# Altium schematic symbol library SamacSys.SchLib: 1235 symbols (part 9 of 13)
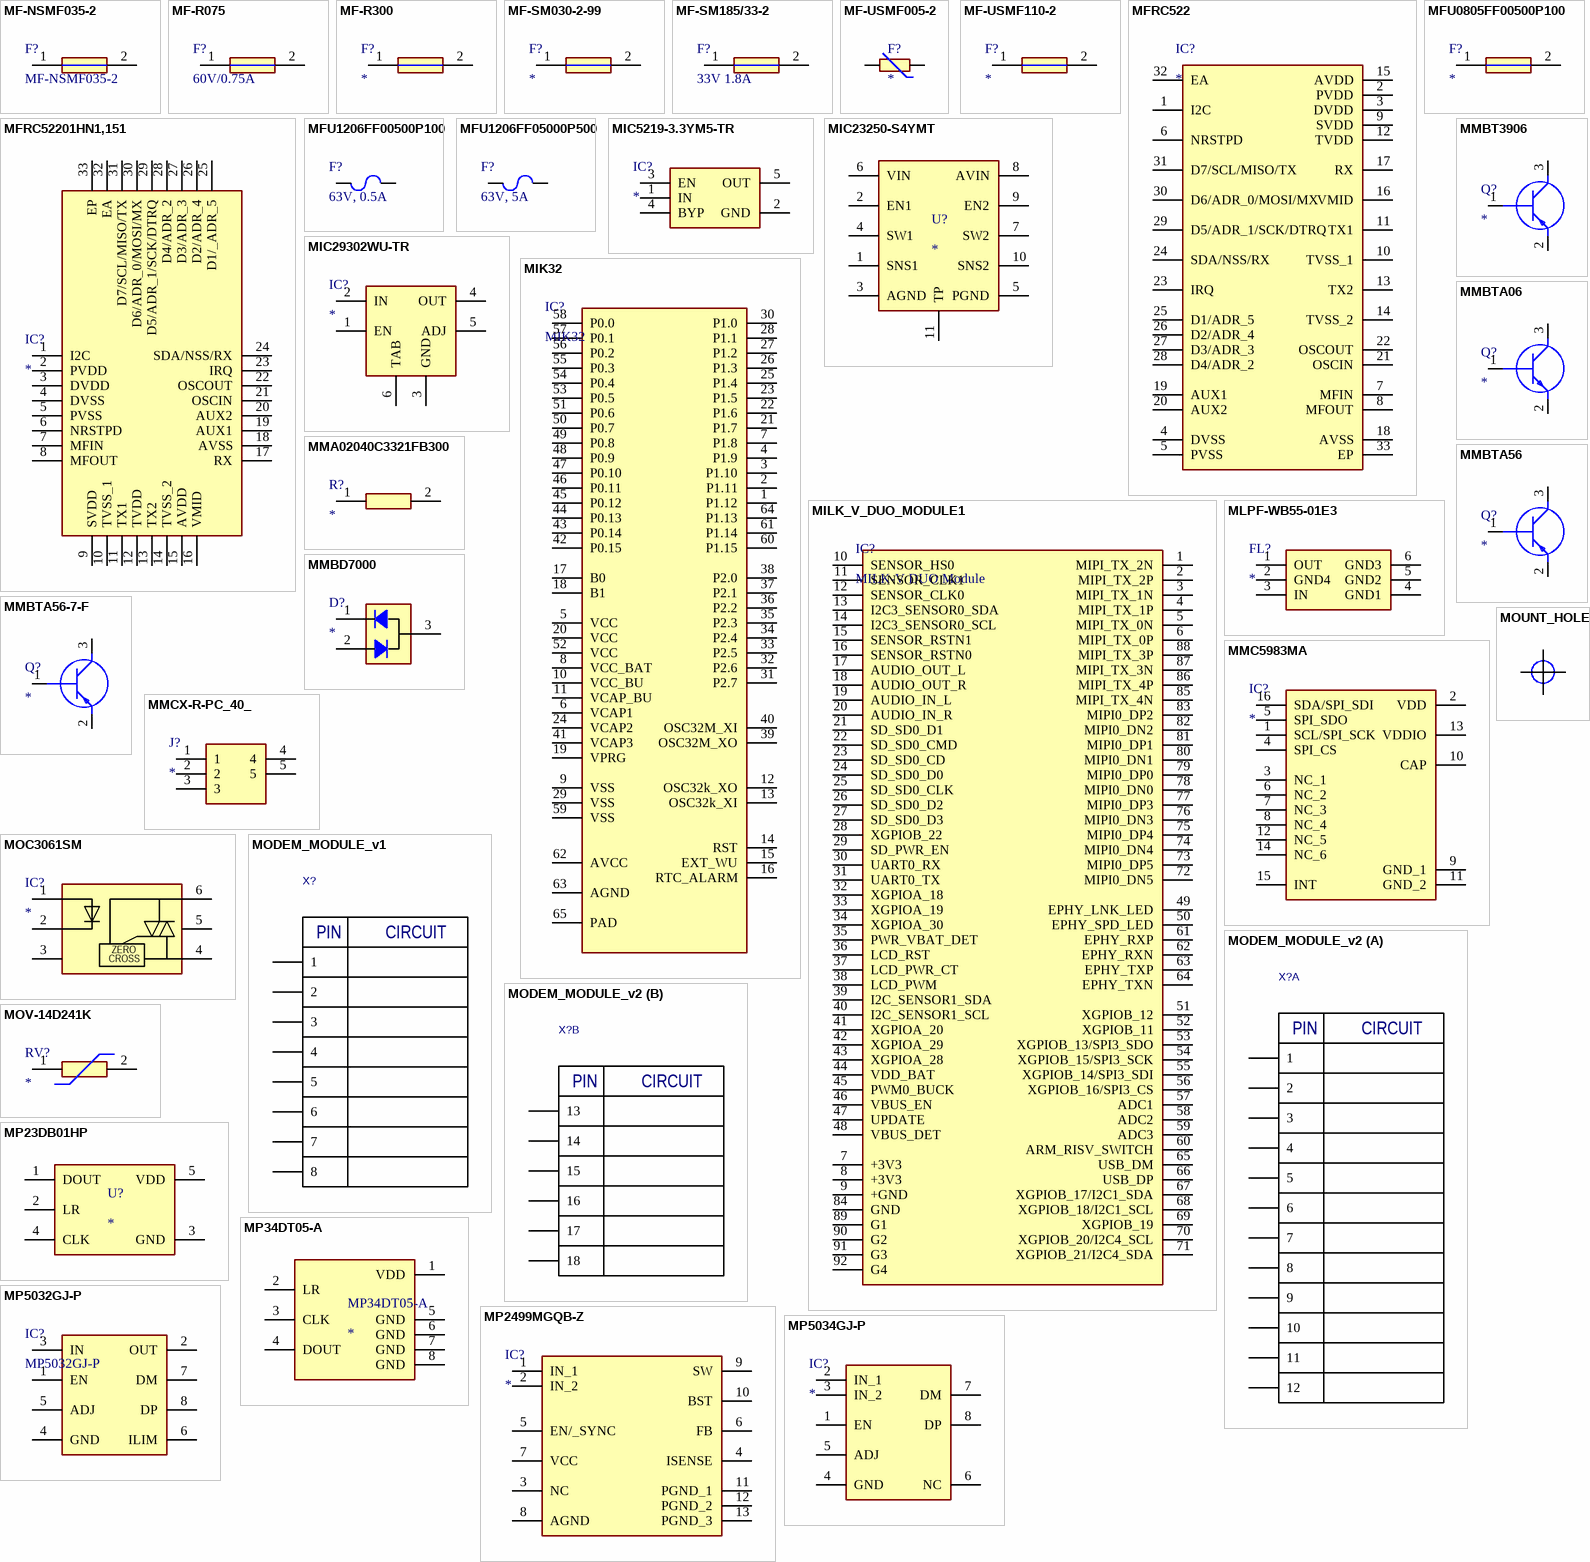
[diagram p53: symbols MF-NSMF035-2 to MP5034GJ-P]

## MILK_V_DUO_MODULE1
designator IC?, comment MILK-V DUO Module
SOM MILK-V DUO Module; Manufacturer_Name: AMUR; Manufacturer_Part_Number: MIK32; Datasheet Link: https://nc.mikron.ru/s/aXSRc8HdLAM2LLg/download; Height: 1.6mm
footprint MILK-V
pins: 1 MIPI_TX_2N, 2 MIPI_TX_2P, 3 MIPI_TX_1N, 4 MIPI_TX_1P, 5 MIPI_TX_0N, 6 MIPI_TX_0P, 7 +3V3, 8 +3V3, 9 +GND, 10 SENSOR_HS0, 11 SENSOR_CLK1, 12 SENSOR_CLK0, 13 I2C3_SENSOR0_SDA, 14 I2C3_SENSOR0_SCL, 15 SENSOR_RSTN1, 16 SENSOR_RSTN0, 17 AUDIO_OUT_L, 18 AUDIO_OUT_R, 19 AUDIO_IN_L, 20 AUDIO_IN_R, 21 SD_SD0_D1, 22 SD_SD0_CMD, 23 SD_SD0_CD, 24 SD_SD0_D0, 25 SD_SD0_CLK, 26 SD_SD0_D2, 27 SD_SD0_D3, 28 XGPIOB_22, 29 SD_PWR_EN, 30 UART0_RX, 31 UART0_TX, 32 XGPIOA_18, 33 XGPIOA_19, 34 XGPIOA_30, 35 PWR_VBAT_DET, 36 LCD_RST, 37 LCD_PWR_CT, 38 LCD_PWM, 39 I2C_SENSOR1_SDA, 40 I2C_SENSOR1_SCL, 41 XGPIOA_20, 42 XGPIOA_29, 43 XGPIOA_28, 44 VDD_BAT, 45 PWM0_BUCK, 46 VBUS_EN, 47 UPDATE, 48 VBUS_DET, 49 EPHY_LNK_LED, 50 EPHY_SPD_LED, 51 XGPIOB_12, 52 XGPIOB_11, 53 XGPIOB_13/SPI3_SDO, 54 XGPIOB_15/SPI3_SCK, 55 XGPIOB_14/SPI3_SDI, 56 XGPIOB_16/SPI3_CS, 57 ADC1, 58 ADC2, 59 ADC3, 60 ARM_RISV_SWITCH, 61 EPHY_RXP, 62 EPHY_RXN, 63 EPHY_TXP, 64 EPHY_TXN, 65 USB_DM, 66 USB_DP, 67 XGPIOB_17/I2C1_SDA, 68 XGPIOB_18/I2C1_SCL, 69 XGPIOB_19, 70 XGPIOB_20/I2C4_SCL, 71 XGPIOB_21/I2C4_SDA, 72 MIPI0_DN5, 73 MIPI0_DP5, 74 MIPI0_DN4, 75 MIPI0_DP4, 76 MIPI0_DN3, 77 MIPI0_DP3, 78 MIPI0_DN0, 79 MIPI0_DP0, 80 MIPI0_DN1, 81 MIPI0_DP1, 82 MIPI0_DN2, 83 MIPI0_DP2, 84 GND, 85 MIPI_TX_4N, 86 MIPI_TX_4P, 87 MIPI_TX_3N, 88 MIPI_TX_3P, 89 G1, 90 G2, 91 G3, 92 G4

## MLPF-WB55-01E3
designator FL?
Filter; Manufacturer_Name: STMicroelectronics; Manufacturer_Part_Number: MLPF-WB55-01E3; Datasheet Link: https://www.st.com/resource/en/datasheet/mlpf-wb55-01e3.pdf; Height: 0.7mm; Mouser Part Number: 511-MLPF-WB55-01E3; Mouser Price/Stock: https://www.mouser.co.uk/ProductDetail/STMicroelectronics/MLPF-WB55-01E3?qs=vLWxofP3U2xV%2FkxL9PmCDA%3D%3D; Arrow Part Number: MLPF-WB55-01E3; Arrow Price/Stock: https://www.arrow.com/en/products/mlpf-wb55-01e3/stmicroelectronics?region=nac
footprint MLPFWB5501E3
pins: 1 OUT, 2 GND4, 3 IN, 4 GND1, 5 GND2, 6 GND3

## MMA02040C3321FB300
designator R?
Resistor; Manufacturer_Name: Vishay; Manufacturer_Part_Number: MMA02040C3321FB300; Datasheet Link: https://datasheet.datasheetarchive.com/originals/distributors/DKDS-23/453161.pdf; Mouser Part Number: 594-MMA02040C3321FB3; Mouser Price/Stock: https://www.mouser.co.uk/ProductDetail/Vishay-Beyschlag/MMA02040C3321FB300?qs=YmMt7wOBEV7gsVIrtGr5Rw%3D%3D; Arrow Part Number: MMA02040C3321FB300; Arrow Price/Stock: https://www.arrow.com/en/products/mma02040c3321fb300/vishay
footprint MMA0204_1
pins: 1, 2

## MMBD7000
designator D?
Diode; Manufacturer_Name: onsemi; Manufacturer_Part_Number: MMBD7000; Datasheet Link: https://www.onsemi.com/download/data-sheet/pdf/MMBD7000-D.pdf; Height: 1.2mm; Mouser Part Number: 512-MMBD7000; Mouser Price/Stock: https://www.mouser.co.uk/ProductDetail/onsemi-Fairchild/MMBD7000?qs=E58pcOqB2RJvzzSZ6FVA5Q%3D%3D; Arrow Part Number: MMBD7000; Arrow Price/Stock: https://www.arrow.com/en/products/mmbd7000/on-semiconductor?region=europe
footprint SOT95P240X120-3N
pins: 1 A, 2 K, 3 K/A

## MMBT3906
designator Q?
Transistor BJT PNP; Manufacturer_Name: NXP; Manufacturer_Part_Number: MMBT3906; Datasheet Link: https://datasheet.pas.partquest.com/images/VipMasterIC/IC/PIRS/PIRSS12749/PIRSS12749-1.pdf?hkey=61A2E4C270F0397D049F8F05BD4F1054; Height: 1.1mm; Mouser Part Number: N/A; Mouser Price/Stock: https://www.mouser.co.uk/ProductDetail/NXP-Semiconductors/MMBT3906?qs=55YtniHzbhA96dkd8h4s7Q%3D%3D
footprint SOT95P230X110-3N
pins: 1 B, 2 E, 3 C

## MMBTA06
designator Q?
Transistor BJT NPN; Manufacturer_Name: onsemi; Manufacturer_Part_Number: MMBTA06; Datasheet Link: http://www.onsemi.com/pub/Collateral/PZTA06-D.pdf; Height: 1.2mm; Mouser Part Number: 512-MMBTA06; Mouser Price/Stock: https://www.mouser.co.uk/ProductDetail/onsemi-Fairchild/MMBTA06?qs=UMEuL5FsraDNITJVR5yrvg%3D%3D; Arrow Part Number: MMBTA06; Arrow Price/Stock: https://www.arrow.com/en/products/mmbta06/on-semiconductor
footprint SOT95P240X120-3N
pins: 1 B, 2 E, 3 C

## MMBTA56
designator Q?
Transistor BJT PNP; Manufacturer_Name: PANJIT International Inc; Manufacturer_Part_Number: MMBTA56; Datasheet Link: https://www.panjit.com.tw/en/Product/downloadPDF/MMBTA56; Height: 1.1mm
footprint SOT95P240X110-3N
pins: 1 B, 2 E, 3 C

## MMBTA56-7-F
designator Q?
Transistor BJT PNP; Manufacturer_Name: Diodes Incorporated; Manufacturer_Part_Number: MMBTA56-7-F; Datasheet Link: https://www.diodes.com/assets/Datasheets/MMBTA55_MMBTA56.pdf; Height: 1.1mm; Mouser Part Number: 621-MMBTA56-F; Mouser Price/Stock: https://www.mouser.co.uk/ProductDetail/Diodes-Incorporated/MMBTA56-7-F?qs=%252BirgkK6WbZHZ3vYMnw8jtQ%3D%3D; Arrow Part Number: MMBTA56-7-F; Arrow Price/Stock: https://www.arrow.com/en/products/mmbta56-7-f/diodes-incorporated?region=nac
footprint SOT96P240X110-3N
pins: 1 B, 2 E, 3 C

## MMC5983MA
designator IC?
Integrated Circuit; Manufacturer_Name: MEMSIC; Manufacturer_Part_Number: MMC5983MA; Datasheet Link: https://www.mouser.com/datasheet/2/821/Memsic_09102019_MMC5983MA_Datasheet_Rev_A-1635338.pdf; Height: 1mm; Mouser Part Number: 438-MMC5983MA; Mouser Price/Stock: https://www.mouser.co.uk/ProductDetail/MEMSIC/MMC5983MA?qs=B6kkDfuK7%2FD5qasHMdEt2g%3D%3D; Arrow Part Number: MMC5983MA; Arrow Price/Stock: https://www.arrow.com/en/products/mmc5983ma/memsic?utm_currency=USD&region=europe
footprint MMC5983MA
pins: 1 SCL/SPI_SCK, 2 VDD, 3 NC_1, 4 SPI_CS, 5 SPI_SDO, 6 NC_2, 7 NC_3, 8 NC_4, 9 GND_1, 10 CAP, 11 GND_2, 12 NC_5, 13 VDDIO, 14 NC_6, 15 INT, 16 SDA/SPI_SDI

## MMCX-R-PC_40_
designator J?
Connector; Manufacturer_Name: Hirose; Manufacturer_Part_Number: MMCX-R-PC(40); Datasheet Link: https://www.hirose.com/product/document?clcode=CL0339-0005-8-40&productname=MMCX-R-PC(40)&series=MMCX&documenttype=2DDrawing&lang=en&documentid=0000965555; Height: 4.6mm; Mouser Part Number: 798-MMCX-R-PC(40); Mouser Price/Stock: https://www.mouser.co.uk/ProductDetail/Hirose-Connector/MMCX-R-PC40?qs=XQjbzJWzFPWEezvy%2FkLdHw%3D%3D
footprint MMCXRPC40
pins: 1, 2, 3, 4, 5

## MOC3061SM
designator IC?
Integrated Circuit; Manufacturer_Name: onsemi; Manufacturer_Part_Number: MOC3061SM; Datasheet Link: http://www.onsemi.com/pub/Collateral/MOC3163M-D.pdf; Height: 4.8mm; Mouser Part Number: 512-MOC3061SM; Mouser Price/Stock: https://www.mouser.co.uk/ProductDetail/onsemi-Fairchild/MOC3061SM?qs=6uASyQ2j9sc08gIKLo3reA%3D%3D; Arrow Part Number: MOC3061SM; Arrow Price/Stock: https://www.arrow.com/en/products/moc3061sm/on-semiconductor?region=europe
footprint SOP254P916X480-6N
pins: 1 ANODE, 2 CATHODE, 3 N/C, 4 MAIN_TERM._1, 5 NC, 6 MAIN_TERM._2
text: ZERO; CROSS

## MODEM_MODULE_v1
designator X?, comment PBD-8  (value not drawn)
Connector; Manufacturer: Connfly; Part Number1: DS-1023-2x4; Part Number: PBD-8; System: Connector
footprint PBD-8_MODULE
pins: 1, 2, 3, 4, 5, 6, 7, 8
text: PIN; CIRCUIT

## MODEM_MODULE_v2
designator X?, comment PBD-12 + PBD-6  (value not drawn)
Connector; Manufacturer: Connfly; Part Number: PBD-8; Part Number1: DS-1023-2x4; System: Connector
footprint MODEM_MODULE_v2
part A pins: 1, 2, 3, 4, 5, 6, 7, 8, 9, 10, 11, 12
part B pins: 13, 14, 15, 16, 17, 18
part A text: PIN; CIRCUIT
part B text: PIN; CIRCUIT

## MOUNT_HOLE
designator MNT?  (value not drawn)  (no BOM)
Mount hole
footprint MOUNT_3.5mm (H3.5 / OUT7)
footprint MOUNT_3mm (H3/OUT6)
footprint MOUNT_4.5mm (H4.5 / OUT9)
footprint MOUNT_4mm (H4 / OUT9)

## MOV-14D241K
designator RV?
Varistor; Manufacturer_Name: Bourns; Manufacturer_Part_Number: MOV-14D241K; Datasheet Link: https://datasheet.datasheetarchive.com/originals/distributors/Datasheets-DGA16/858708.pdf; Height: 20mm; Mouser Part Number: 652-MOV-14D241K; Mouser Price/Stock: https://www.mouser.co.uk/ProductDetail/Bourns/MOV-14D241K?qs=CQ3B1E%252BbPs2CiKalQN9uMQ%3D%3D; Arrow Part Number: MOV-14D241K; Arrow Price/Stock: https://www.arrow.com/en/products/mov-14d241k/bourns
footprint MOV14D241K
pins: 1, 2

## MP23DB01HP
designator U?
MEMS Microphone
footprint MP23DB01HP
pins: 1 DOUT, 2 LR, 3 GND, 4 CLK, 5 VDD

## MP34DT05-A
designator MP34DT05-A
Microphone; Manufacturer_Name: STMicroelectronics; Manufacturer_Part_Number: MP34DT05-A; Datasheet Link: https://media.digikey.com/pdf/Data%20Sheets/ST%20Microelectronics%20PDFS/MP34DT01.pdf; Height: 1.1mm; Mouser Part Number: MP34DT05-A; Mouser Price/Stock: https://www.mouser.co.uk/ProductDetail/STMicroelectronics/MP34DT01?qs=%252BZOPz%252B2NLYX0JbkGIwERSA%3D%3D; Arrow Part Number: MP34DT05-A; Arrow Price/Stock: https://www.arrow.com/en/products/mp34dt01/stmicroelectronics
footprint MP34DT01
pins: 1 VDD, 2 LR, 3 CLK, 4 DOUT, 5 GND, 6 GND, 7 GND, 8 GND

## MP2499MGQB-Z
designator IC?
Integrated Circuit; Manufacturer_Name: Monolithic Power Systems (MPS); Manufacturer_Part_Number: MP2499MGQB-Z; Datasheet Link: https://www.monolithicpower.com/en/documentview/productdocument/index/version/2/document_type/Datasheet/lang/en/sku/MP2499M/; Height: 1mm; Mouser Part Number: 946-MP2499MGQB-Z; Mouser Price/Stock: https://www.mouser.co.uk/ProductDetail/Monolithic-Power-Systems-MPS/MP2499MGQB-Z?qs=ElWnhazmAO7FvyeUPRaEMA%3D%3D
footprint MP2499MGQBZ
pins: 1 IN_1, 2 IN_2, 3 NC, 4 ISENSE, 5 EN/_SYNC, 6 FB, 7 VCC, 8 AGND, 9 SW, 10 BST, 11 PGND_1, 12 PGND_2, 13 PGND_3

## MP5032GJ-P
designator IC?
Integrated Circuit; Manufacturer_Name: Monolithic Power Systems (MPS); Datasheet Link: https://componentsearchengine.com/Datasheets/1/MP5034GJ-P.pdf; Height: 1mm; Manufacturer_Part_Number: MP5032GJ-P; Mouser Part Number: 946-MP5032GJ-P; Mouser Price/Stock: https://www.mouser.com/Search/Refine.aspx?Keyword=946-MP5034GJ-P
footprint SOT65P280X100-8N
pins: 1 EN, 2 OUT, 3 IN, 4 GND, 5 ADJ, 6 ILIM, 7 DM, 8 DP

## MP5034GJ-P
designator IC?
Integrated Circuit; Manufacturer_Name: Monolithic Power Systems (MPS); Manufacturer_Part_Number: MP5034GJ-P; Datasheet Link: https://componentsearchengine.com/Datasheets/1/MP5034GJ-P.pdf; Height: 1mm; Mouser Part Number: 946-MP5034GJ-P; Mouser Price/Stock: https://www.mouser.com/Search/Refine.aspx?Keyword=946-MP5034GJ-P
footprint SOT65P280X100-8N
pins: 1 EN, 2 IN_1, 3 IN_2, 4 GND, 5 ADJ, 6 NC, 7 DM, 8 DP

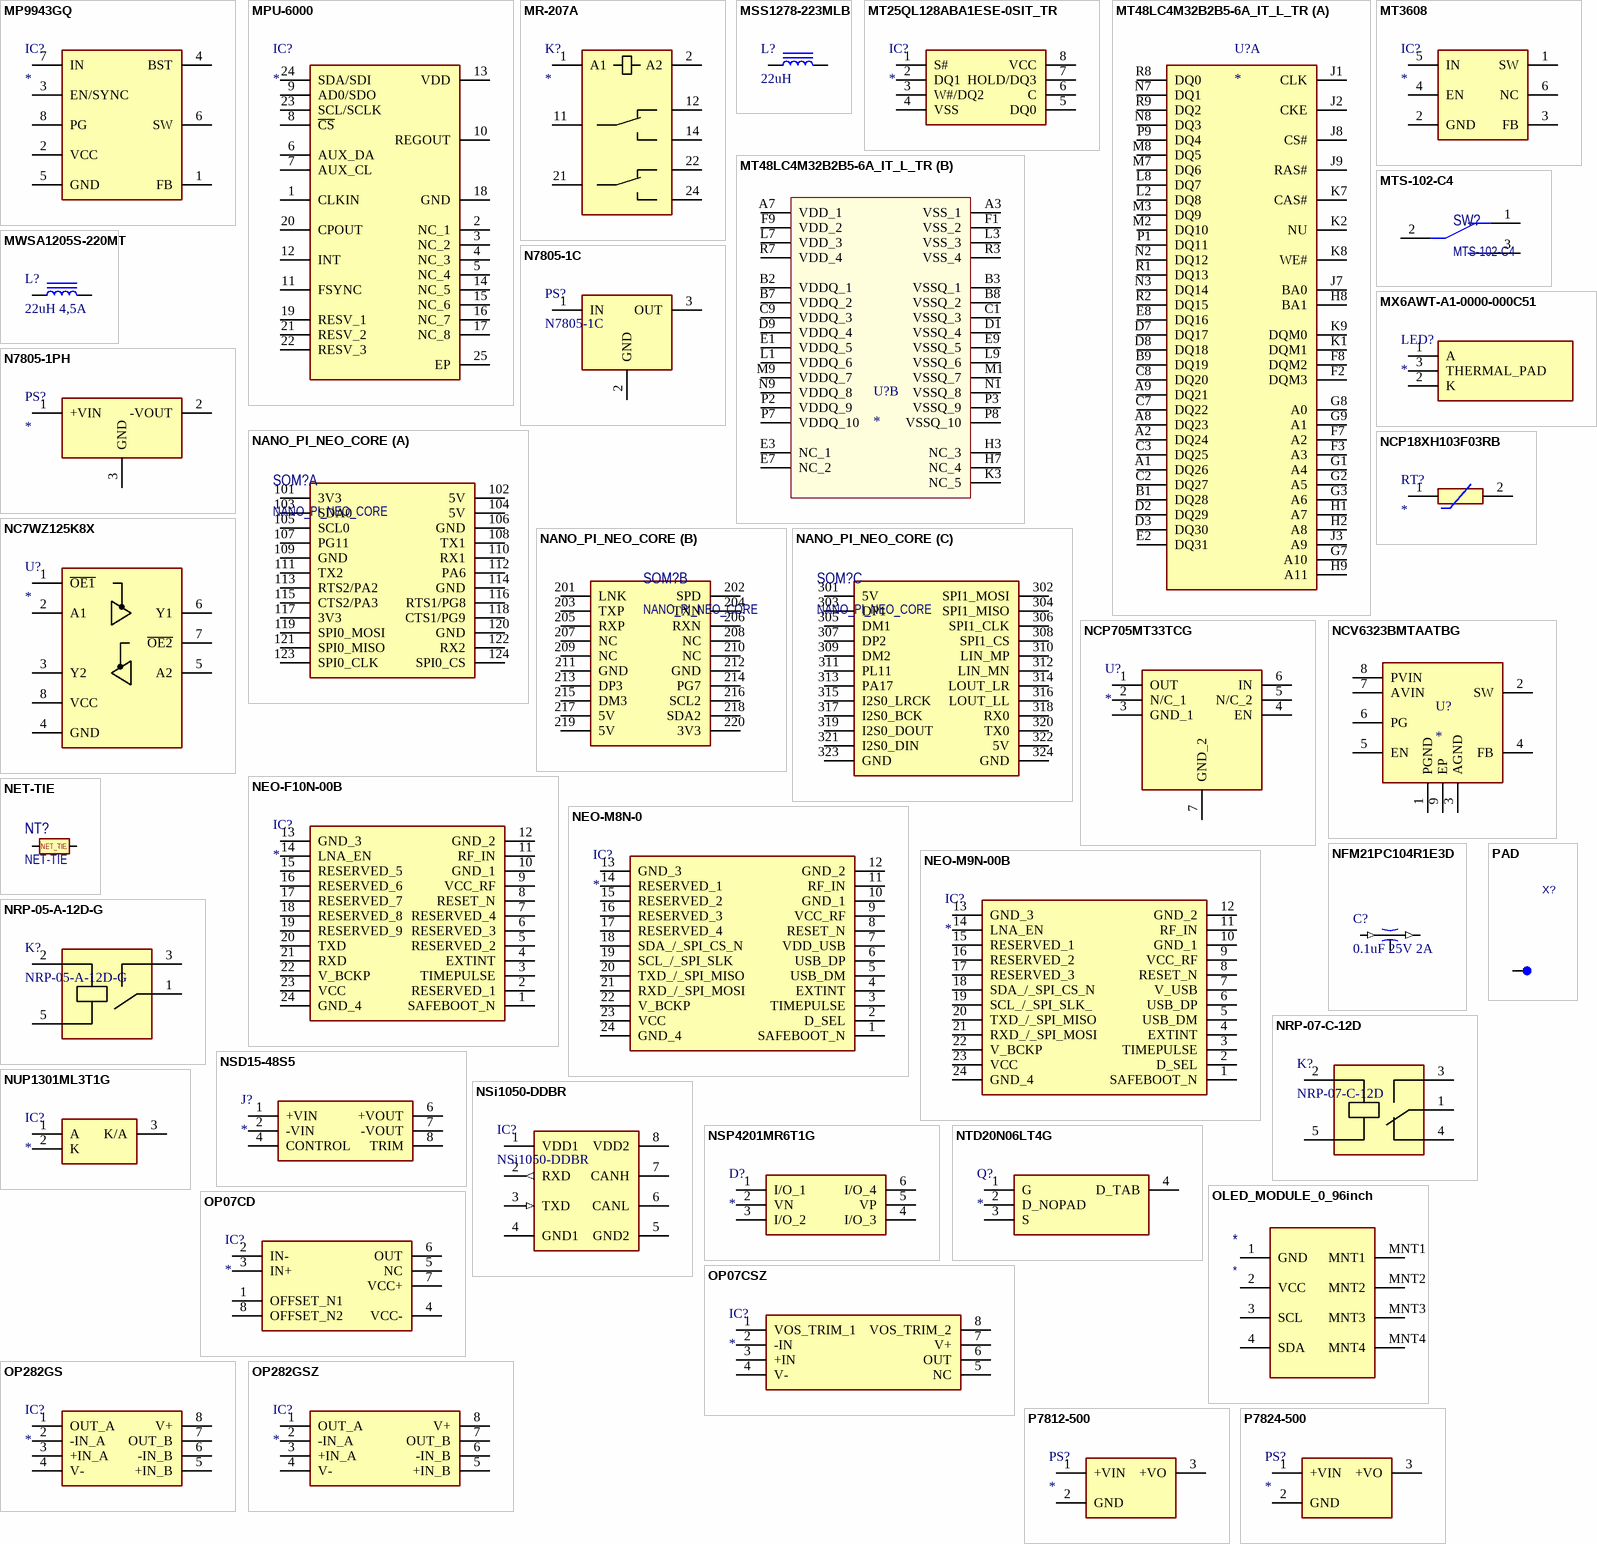
[diagram p28: symbols MP9943GQ to PAD]

## MP9943GQ
designator IC?
Integrated Circuit; Manufacturer_Name: Monolithic Power Systems (MPS); Manufacturer_Part_Number: MP9943GQ-P; Datasheet Link: https://www.monolithicpower.com/pub/media/document/MP9943_r1.1.pdf; Height: 1mm; Mouser Part Number: 946-MP9943GQ-P; Mouser Price/Stock: https://www.mouser.co.uk/ProductDetail/Monolithic-Power-Systems-MPS/MP9943GQ-P?qs=493kPxzlxfIUN%2FwqEBzqKg%3D%3D
footprint SON65P300X300X100-8N
pins: 1 FB, 2 VCC, 3 EN/SYNC, 4 BST, 5 GND, 6 SW, 7 IN, 8 PG

## MPU-6000
designator IC?
Integrated Circuit, Motion Processing Unit; Manufacturer_Name: TDK; Datasheet Link: https://product.tdk.com/system/files/dam/doc/product/sensor/mortion-inertial/imu/data_sheet/mpu-6000-datasheet1.pdf; Height: 0.95mm; Manufacturer_Part_Number: MPU-6000; Mouser Part Number: 410-MPU-6000; Mouser Price/Stock: https://www.mouser.co.uk/ProductDetail/TDK-InvenSense/MPU-6000?qs=u4fy%2FsgLU9NMLimeLRzXLA%3D%3D; Arrow Part Number: MPU-6000; Arrow Price/Stock: https://www.arrow.com/en/products/mpu-6000/invensense?region=nac
footprint QFN50P400X400X95-25N
pins: 1 CLKIN, 2 NC_1, 3 NC_2, 4 NC_3, 5 NC_4, 6 AUX_DA, 7 AUX_CL, 8 ~{CS}, 9 AD0/SDO, 10 REGOUT, 11 FSYNC, 12 INT, 13 VDD, 14 NC_5, 15 NC_6, 16 NC_7, 17 NC_8, 18 GND, 19 RESV_1, 20 CPOUT, 21 RESV_2, 22 RESV_3, 23 SCL/SCLK, 24 SDA/SDI, 25 EP

## MR-207A
designator K?
Relay; Manufacturer_Name: KIPPribor; Manufacturer_Part_Number: MR-207A; Datasheet Link: https://static.chipdip.ru/lib/620/DOC017620053.pdf; Height: 26mm
footprint MR-20X (Relay KIPPribor)
pins: 1 A1, 2 A2, 11 1_COM, 12 1_NC, 14 1_NO, 21 2_COM, 22 2_NC, 24 2_NO

## MSS1278-223MLB
designator L?, comment 22uH
SMT Inductor; Value: 22uH
footprint INDPM120120X805N
pins: 1, 2

## MT25QL128ABA1ESE-0SIT_TR
designator IC?
Integrated Circuit; Manufacturer_Name: Micron; Manufacturer_Part_Number: MT25QL128ABA1ESE-0SIT TR; Datasheet Link: https://datasheet.datasheetarchive.com/originals/distributors/DKDS42/DSANUWW0045431.pdf; Height: 2.16mm; Mouser Part Number: 340-224871-REEL; Mouser Price/Stock: https://www.mouser.co.uk/ProductDetail/Micron/MT25QL128ABA1ESE-0SIT-TR?qs=j%252B1pi9TdxUbjYudTgg%2Fegw%3D%3D; Arrow Part Number: MT25QL128ABA1ESE-0SIT TR; Arrow Price/Stock: https://www.arrow.com/en/products/mt25ql128aba1ese-0sittr/micron-technology?utm_currency=USD&region=nac
footprint SOIC127P790X216-8N
pins: 1 S#, 2 DQ1, 3 W#/DQ2, 4 VSS, 5 DQ0, 6 C, 7 HOLD/DQ3, 8 VCC

## MT48LC4M32B2B5-6A_IT_L_TR
designator U?
Integrated Circuit; Manufacturer_Name: Micron; Manufacturer_Part_Number: MT48LC4M32B2B5-6A IT:L TR; Datasheet Link: https://www.mouser.com/ProductDetail/Micron/MT48LC4M32B2B5-6A-ITL-TR?qs=taEdVNyAfdFf0ie6uqnOXg%3D%3D; Height: 1mm; Mouser Part Number: 340-128676-REEL; Mouser Price/Stock: https://www.mouser.com/Search/Refine.aspx?Keyword=340-128676-REEL; Arrow Part Number: MT48LC4M32B2B5-6A IT:L TR; Arrow Price/Stock: https://www.arrow.com/en/products/mt48lc4m32b2b5-6aitltr/micron-technology
footprint BGA90C80P9X15_800X1300X100
part A pins: A1 DQ26, A2 DQ24, A8 DQ23, A9 DQ21, B1 DQ28, B9 DQ19, C2 DQ27, C3 DQ25, C7 DQ22, C8 DQ20, D2 DQ29, D3 DQ30, D7 DQ17, D8 DQ18, E2 DQ31, E8 DQ16, F2 DQM3, F3 A3, F7 A2, F8 DQM2, G1 A4, G2 A5, G3 A6, G7 A10, G8 A0, G9 A1, H1 A7, H2 A8, H8 BA1, H9 A11, J1 CLK, J2 CKE, J3 A9, J7 BA0, J8 CS#, J9 RAS#, K1 DQM1, K2 NU, K7 CAS#, K8 WE#, K9 DQM0, L2 DQ8, L8 DQ7, M2 DQ10, M3 DQ9, M7 DQ6, M8 DQ5, N2 DQ12, N3 DQ14, N7 DQ1, N8 DQ3, P1 DQ11, P9 DQ4, R1 DQ13, R2 DQ15, R8 DQ0, R9 DQ2
part B pins: A3 VSS_1, A7 VDD_1, B2 VDDQ_1, B3 VSSQ_1, B7 VDDQ_2, B8 VSSQ_2, C1 VSSQ_3, C9 VDDQ_3, D1 VSSQ_4, D9 VDDQ_4, E1 VDDQ_5, E3 NC_1, E7 NC_2, E9 VSSQ_5, F1 VSS_2, F9 VDD_2, H3 NC_3, H7 NC_4, K3 NC_5, L1 VDDQ_6, L3 VSS_3, L7 VDD_3, L9 VSSQ_6, M1 VSSQ_7, M9 VDDQ_7, N1 VSSQ_8, N9 VDDQ_8, P2 VDDQ_9, P3 VSSQ_9, P7 VDDQ_10, P8 VSSQ_10, R3 VSS_4, R7 VDD_4

## MT3608
designator IC?
DCDC StepUp 2-24 to; Manufacturer_Name: Aerosemi; Manufacturer_Part_Number: MT3608; Datasheet Link: https://www.olimex.com/Products/Breadboarding/BB-PWR-3608/resources/MT3608.pdf; Height: 1.45mm
footprint SOT95P280X145-6N
pins: 1 SW, 2 GND, 3 FB, 4 EN, 5 IN, 6 NC

## MTS-102-C4
designator SW?
SWITCH, TOGGLE, 3P, ON-ON
footprint MTS-102-C4 (Footprint not found)
pins: 1, 2, 3

## MWSA1205S-220MT
designator L?, comment 22uH 4,5A
SMT Inductor; Manufacturer: Sunlord; Value: 22uH 4,5A; ComponentLink1Description: New link; ComponentLink1URL: *; JLCPCB Part Number: C408518
footprint MWSA1205S
pins: 1, 2

## MX6AWT-A1-0000-000C51
designator LED?
LED; Manufacturer_Name: CREE LED; Manufacturer_Part_Number: MX6AWT-A1-0000-000C51; Datasheet Link: https://www.cree.com/led-components/media/documents/XLampMX6.pdf; Mouser Part Number: 941-MX6AWTA1000C51; Mouser Price/Stock: https://www.mouser.co.uk/ProductDetail/Cree-Inc/MX6AWT-A1-0000-000C51?qs=UHyCXFkX5EzTYdQcfT1T2A%3D%3D; Arrow Part Number: MX6AWT-A1-0000-000C51; Arrow Price/Stock: https://www.arrow.com/en/products/mx6awt-a1-0000-000c51/cree
footprint MX6-PLCC
pins: 1 A, 2 K, 3 THERMAL_PAD

## N7805-1C
designator PS?
Power Supply, IN 8-36V, OUT 5V/1A
footprint N7805-1C
pins: 1 IN (power), 2 GND (power), 3 OUT (power)

## N7805-1PH
designator PS?
Power Supply; Manufacturer_Name: Mean Well; Manufacturer_Part_Number: N7805-1PH; Datasheet Link: https://www.meanwell.com/webapp/product/search.aspx?prod=N78; Height: 7.5mm; Mouser Part Number: 709-N7805-1PH; Mouser Price/Stock: https://www.mouser.co.uk/ProductDetail/MEAN-WELL/N7805-1PH?qs=7D1LtPJG0i2yQtENgJv8Bw%3D%3D
footprint N78051PH
pins: 1 +VIN, 2 -VOUT, 3 GND

## NANO_PI_NEO_CORE
designator SOM?
footprint NANOPINEOCORE
part A pins: 101 3V3, 102 5V, 103 SDA0, 104 5V, 105 SCL0, 106 GND, 107 PG11, 108 TX1, 109 GND, 110 RX1, 111 TX2, 112 PA6, 113 RTS2/PA2, 114 GND, 115 CTS2/PA3, 116 RTS1/PG8, 117 3V3, 118 CTS1/PG9, 119 SPI0_MOSI, 120 GND, 121 SPI0_MISO, 122 RX2, 123 SPI0_CLK, 124 SPI0_CS
part B pins: 201 LNK, 202 SPD, 203 TXP, 204 TXN, 205 RXP, 206 RXN, 207 NC, 208 NC, 209 NC, 210 NC, 211 GND, 212 GND, 213 DP3, 214 PG7, 215 DM3, 216 SCL2, 217 5V, 218 SDA2, 219 5V, 220 3V3
part C pins: 301 5V, 302 SPI1_MOSI, 303 DP1, 304 SPI1_MISO, 305 DM1, 306 SPI1_CLK, 307 DP2, 308 SPI1_CS, 309 DM2, 310 LIN_MP, 311 PL11, 312 LIN_MN, 313 PA17, 314 LOUT_LR, 315 I2S0_LRCK, 316 LOUT_LL, 317 I2S0_BCK, 318 RX0, 319 I2S0_DOUT, 320 TX0, 321 I2S0_DIN, 322 5V, 323 GND, 324 GND

## NC7WZ125K8X
designator U?
Integrated Circuit; Manufacturer_Name: onsemi; Manufacturer_Part_Number: NC7WZ125K8X; Datasheet Link: https://www.lcsc.com/datasheet/lcsc_datasheet_2410121813_onsemi-NC7WZ125K8X_C457629.pdf; Height: 0.9mm
footprint SOP50P310X90-8N
pins: 1 ~{OE1}, 2 A1, 3 Y2, 4 GND, 5 A2, 6 Y1, 7 ~{OE2}, 8 VCC

## NCP18XH103F03RB
designator RT?
Thermistor; Manufacturer_Name: Murata Electronics; Manufacturer_Part_Number: NCP18XH103F03RB; Datasheet Link: https://componentsearchengine.com/Datasheets/2/NCP18XH103F03RB.pdf; Height: 0.95mm; Mouser Part Number: 81-NCP18XH103F03RB; Mouser Price/Stock: https://www.mouser.co.uk/ProductDetail/Murata-Electronics/NCP18XH103F03RB?qs=k3rQb2PKXqkF9YvF09qsvw%3D%3D; Arrow Part Number: NCP18XH103F03RB; Arrow Price/Stock: https://www.arrow.com/en/products/ncp18xh103f03rb/murata-manufacturing?utm_currency=USD&region=europe
footprint THRMC1608X95N
pins: 1, 2

## NCP705MT33TCG
designator U?
Integrated Circuit; Manufacturer_Name: ON Semiconductor; Manufacturer_Part_Number: NCP705MT33TCG; Datasheet Link: http://www.onsemi.com/pub/Collateral/NCP705-D.PDF; Height: 0.8mm; Mouser Part Number: 863-NCP705MT33TCG; Mouser Price/Stock: https://www.mouser.co.uk/ProductDetail/ON-Semiconductor/NCP705MT33TCG?qs=l5F7KFZg3O5BAqXCIJeMgQ%3D%3D; Arrow Part Number: NCP705MT33TCG; Arrow Price/Stock: https://www.arrow.com/en/products/ncp705mt33tcg/on-semiconductor
footprint SON65P200X200X80-7N
pins: 1 OUT, 2 N/C_1, 3 GND_1, 4 EN, 5 N/C_2, 6 IN, 7 GND_2

## NCV6323BMTAATBG
designator U?
Integrated Circuit; Manufacturer_Name: ON Semiconductor; Manufacturer_Part_Number: NCV6323BMTAATBG; Datasheet Link: http://www.onsemi.com/pub/Collateral/NCV6323-D.PDF; Height: 0.8mm; Mouser Part Number: 863-NCV6323BMTAATBG; Mouser Price/Stock: https://www.mouser.com/Search/Refine.aspx?Keyword=863-NCV6323BMTAATBG; Arrow Part Number: NCV6323BMTAATBG; Arrow Price/Stock: https://www.arrow.com/en/products/ncv6323bmtaatbg/on-semiconductor
footprint SON50P200X200X80-9N
pins: 1 PGND, 2 SW, 3 AGND, 4 FB, 5 EN, 6 PG, 7 AVIN, 8 PVIN, 9 EP

## NEO-F10N-00B
designator IC?
Integrated Circuit; Manufacturer_Name: u-blox; Manufacturer_Part_Number: NEO-F10N-00B; Datasheet Link: https://content.u-blox.com/sites/default/files/documents/NEO-F10N_DataSheet_UBX-23002117.pdf; Height: 2.6mm; Mouser Part Number: 377-NEO-F10N-00B; Mouser Price/Stock: https://www.mouser.co.uk/ProductDetail/u-blox/NEO-F10N-00B?qs=Imq1NPwxi76uVH%2FItRhLgw%3D%3D; Arrow Part Number: NEO-F10N-00B; Arrow Price/Stock: null?region=nac
footprint NEOF10N00B (Footprint not found)
pins: 1 SAFEBOOT_N, 2 RESERVED_1, 3 TIMEPULSE, 4 EXTINT, 5 RESERVED_2, 6 RESERVED_3, 7 RESERVED_4, 8 RESET_N, 9 VCC_RF, 10 GND_1, 11 RF_IN, 12 GND_2, 13 GND_3, 14 LNA_EN, 15 RESERVED_5, 16 RESERVED_6, 17 RESERVED_7, 18 RESERVED_8, 19 RESERVED_9, 20 TXD, 21 RXD, 22 V_BCKP, 23 VCC, 24 GND_4

## NEO-M8N-0
designator IC?
Integrated Circuit; Manufacturer_Name: u-blox; Manufacturer_Part_Number: NEO-M8N-0; Datasheet Link: https://www.u-blox.com/sites/default/files/NEO-M8-FW3_DataSheet_%28UBX-15031086%29.pdf; Mouser Part Number: 377-NEO-M8N-0; Mouser Price/Stock: https://www.mouser.co.uk/ProductDetail/u-blox/NEO-M8N-0?qs=zW32dvEIR3unZhZI0KRbew%3D%3D
footprint NEO-M8T
pins: 1 SAFEBOOT_N, 2 D_SEL, 3 TIMEPULSE, 4 EXTINT, 5 USB_DM, 6 USB_DP, 7 VDD_USB, 8 RESET_N, 9 VCC_RF, 10 GND_1, 11 RF_IN, 12 GND_2, 13 GND_3, 14 RESERVED_1, 15 RESERVED_2, 16 RESERVED_3, 17 RESERVED_4, 18 SDA_/_SPI_CS_N, 19 SCL_/_SPI_SLK, 20 TXD_/_SPI_MISO, 21 RXD_/_SPI_MOSI, 22 V_BCKP, 23 VCC, 24 GND_4

## NEO-M9N-00B
designator IC?
Integrated Circuit; Manufacturer_Name: u-blox; Manufacturer_Part_Number: NEO-M9N-00B; Datasheet Link: https://content.u-blox.com/sites/default/files/NEO-M9N-00B_DataSheet_UBX-19014285.pdf; Height: 2.6mm; Mouser Part Number: 377-NEO-M9N-00B; Mouser Price/Stock: https://www.mouser.co.uk/ProductDetail/u-blox/NEO-M9N-00B?qs=DPoM0jnrROVeJ6BHpcwcjw%3D%3D; Arrow Part Number: NEO-M9N-00B; Arrow Price/Stock: https://www.arrow.com/en/products/neo-m9n-00b/u-blox?utm_currency=USD&region=nac
footprint NEOM9N00B (Footprint not found)
pins: 1 SAFEBOOT_N, 2 D_SEL, 3 TIMEPULSE, 4 EXTINT, 5 USB_DM, 6 USB_DP, 7 V_USB, 8 RESET_N, 9 VCC_RF, 10 GND_1, 11 RF_IN, 12 GND_2, 13 GND_3, 14 LNA_EN, 15 RESERVED_1, 16 RESERVED_2, 17 RESERVED_3, 18 SDA_/_SPI_CS_N, 19 SCL_/_SPI_SLK_, 20 TXD_/_SPI_MISO, 21 RXD_/_SPI_MOSI, 22 V_BCKP, 23 VCC, 24 GND_4

## NET-TIE
designator NT?  (net tie, no BOM)
footprint NET_TIE_10mil
footprint NET_TIE_20mil
pins: 1, 2
text: NET_TIE

## NFM21PC104R1E3D
designator С?, comment 0.1uF 25V 2A
CAP FEEDTHRU 0.1UF 20% 25V 2A 0805; Manufacturer_Name: Murata Electronics; Manufacturer_Part_Number: NFM21PC104R1E3D; Datasheet Link: https://psearch.en.murata.com/capacitor/product/NFM21PC104R1E3%23.html; Height: 0.95mm; Mouser Part Number: 81-NFM21PC104R1E3D; Mouser Price/Stock: https://www.mouser.co.uk/ProductDetail/Murata-Electronics/NFM21PC104R1E3D?qs=8PivYkE13dmeIs0sgT9NjA%3D%3D; Arrow Part Number: NFM21PC104R1E3D; Arrow Price/Stock: https://www.arrow.com/en/products/nfm21pc104r1e3d/murata-manufacturing?utm_currency=USD&region=nac; Capacitance: 0.1uF; Rated Voltage: 25V; Value: 0.1uF 25V 2A
footprint NFM21PC104R1E3D; pin to pad 2>2+4
pins: 1 INPUT (in), 2, 3 OUTPUT (out)

## NRP-05-A-12D-G
designator K?
Relay, 12V, 7A/250V; Manufacturer_Name: NCR; Manufacturer_Part_Number: NRP-07-C-12D; Datasheet Link: https://static.chipdip.ru/lib/399/DOC001399110.pdf; Height: 15.9mm
footprint NRP05
pins: 1 COIL_1, 2 NC, 3 NO, 5 COM

## NRP-07-C-12D
designator K?
Relay, 12V, 7A/250V; Manufacturer_Name: NCR; Datasheet Link: https://static.chipdip.ru/lib/399/DOC001399110.pdf; Height: 15.9mm; Manufacturer_Part_Number: NRP-07-C-12D
footprint NRP07C05D
pins: 1 COIL_1, 2 NC, 3 NO, 4 COIL_2, 5 COM

## NSD15-48S5
designator J?
Connector; Manufacturer_Name: Mean Well; Manufacturer_Part_Number: NSD15-48S5; Datasheet Link: https://www.meanwell.com/Upload/PDF/NSD15-S/NSD15-S-SPEC.PDF; Height: 9.82mm; Mouser Part Number: 709-NSD15-48S5; Mouser Price/Stock: https://www.mouser.co.uk/ProductDetail/MEAN-WELL/NSD15-48S5?qs=l0g2inPJSHO%252B3SC1n3K4YQ%3D%3D; Arrow Part Number: NSD15-48S5; Arrow Price/Stock: https://www.arrow.com/en/products/nsd15-48s5/mean-well-enterprises
footprint NSD1548S5
pins: 1 +VIN, 2 -VIN, 4 CONTROL, 6 +VOUT, 7 -VOUT, 8 TRIM

## NSi1050-DDBR
designator IC?
Integrated Circuit; Manufacturer_Name: Novosense; Datasheet Link: https://datasheet.lcsc.com/lcsc/2205181716_NOVOSENSE-NSI1050-DDBR_C917454.pdf; Height: 4.19mm; Manufacturer_Part_Number: NSi1050-DDBR
footprint SOP254P1040X419-8N
pins: 1 VDD1, 2 RXD (out), 3 TXD (in), 4 GND1, 5 GND2, 6 CANL, 7 CANH, 8 VDD2

## NSP4201MR6T1G
designator D?
Diode; Manufacturer_Name: onsemi; Manufacturer_Part_Number: NSP4201MR6T1G; Datasheet Link: http://www.onsemi.com/pub/Collateral/NSP4201MR6-D.PDF; Height: 1.1mm; Mouser Part Number: 863-NSP4201MR6T1G; Mouser Price/Stock: https://www.mouser.co.uk/ProductDetail/onsemi/NSP4201MR6T1G?qs=HXFqYaX1Q2whaYHWjb5Gzw%3D%3D; Arrow Part Number: NSP4201MR6T1G; Arrow Price/Stock: https://www.arrow.com/en/products/nsp4201mr6t1g/on-semiconductor?region=nac
footprint SOP95P275X110-6N
pins: 1 I/O_1, 2 VN, 3 I/O_2, 4 I/O_3, 5 VP, 6 I/O_4

## NTD20N06LT4G
designator Q?
Transistor; Manufacturer_Name: onsemi; Manufacturer_Part_Number: NTD20N06LT4G; Datasheet Link: http://www.onsemi.com/pub/Collateral/NTD20N06L-D.PDF; Height: 2.38mm; Mouser Part Number: 863-NTD20N06LT4G; Mouser Price/Stock: https://www.mouser.co.uk/ProductDetail/onsemi/NTD20N06LT4G?qs=ZXBb0xZ9WeAQy8iQ%252Bj1%252BFg%3D%3D; Arrow Part Number: NTD20N06LT4G; Arrow Price/Stock: https://www.arrow.com/en/products/ntd20n06lt4g/on-semiconductor
footprint TO229P990X238-4N
pins: 1 G, 2 D_NOPAD, 3 S, 4 D_TAB

## NUP1301ML3T1G
designator IC?
Integrated Circuit; Manufacturer_Name: onsemi; Manufacturer_Part_Number: NUP1301ML3T1G; Datasheet Link: http://www.onsemi.com/pub/Collateral/NUP1301ML3T1-D.PDF; Height: 1.11mm; Mouser Part Number: 863-NUP1301ML3T1G; Mouser Price/Stock: https://www.mouser.co.uk/ProductDetail/onsemi/NUP1301ML3T1G?qs=ZXBb0xZ9WeAPOdRvI26C7A%3D%3D; Arrow Part Number: NUP1301ML3T1G; Arrow Price/Stock: https://www.arrow.com/en/products/nup1301ml3t1g/on-semiconductor?region=nac
footprint SOT96P237X111-3N
pins: 1 A, 2 K, 3 K/A

## OLED_MODULE_0_96inch
designator *
footprint OLED_MODULE_0_96inch
pins: 1 GND, 2 VCC, 3 SCL, 4 SDA, MNT1, MNT2, MNT3, MNT4

## OP07CD
designator IC?
Integrated Circuit; Manufacturer_Name: Texas Instruments; Manufacturer_Part_Number: OP07CD; Datasheet Link: http://www.ti.com/lit/ds/symlink/op07c.pdf; Height: 1.75mm; Mouser Part Number: 595-OP07CD; Mouser Price/Stock: https://www.mouser.co.uk/ProductDetail/Texas-Instruments/OP07CD?qs=6gY4t2uohMzbQf2c%2F7YGgw%3D%3D; Arrow Part Number: OP07CD; Arrow Price/Stock: https://www.arrow.com/en/products/op07cd/texas-instruments?region=nac
footprint SOIC127P600X175-8N
pins: 1 OFFSET_N1, 2 IN-, 3 IN+, 4 VCC-, 5 NC, 6 OUT, 7 VCC+, 8 OFFSET_N2

## OP07CSZ
designator IC?
Integrated Circuit; Manufacturer_Name: Analog Devices; Manufacturer_Part_Number: OP07CSZ; Datasheet Link: http://www.analog.com/static/imported-files/data_sheets/OP07.pdf; Height: 1.75mm; Mouser Part Number: 584-OP07CSZ; Mouser Price/Stock: https://www.mouser.co.uk/ProductDetail/Analog-Devices/OP07CSZ?qs=WIvQP4zGanizySAfbhm6qA%3D%3D; Arrow Part Number: OP07CSZ; Arrow Price/Stock: https://www.arrow.com/en/products/op07csz/analog-devices?region=europe
footprint SOIC127P600X175-8N
pins: 1 VOS_TRIM_1, 2 -IN, 3 +IN, 4 V-, 5 NC, 6 OUT, 7 V+, 8 VOS_TRIM_2

## OP282GS
designator IC?
Integrated Circuit; Manufacturer_Name: Analog Devices; Manufacturer_Part_Number: OP282GS; Datasheet Link: https://componentsearchengine.com/Datasheets/1/OP282GS.pdf; Height: 1.75mm; Mouser Part Number: 584-OP282GS; Mouser Price/Stock: http://www.mouser.com/Search/ProductDetail.aspx?qs=WIvQP4zGanjOndX%252bu88RfQ%3d%3d
footprint SOIC127P600X175-8N
pins: 1 OUT_A, 2 -IN_A, 3 +IN_A, 4 V-, 5 +IN_B, 6 -IN_B, 7 OUT_B, 8 V+

## OP282GSZ
designator IC?
Integrated Circuit; Manufacturer_Name: Analog Devices; Manufacturer_Part_Number: OP282GSZ; Datasheet Link: http://componentsearchengine.com/Datasheets/1/OP282GSZ.pdf; Height: 1.75mm; Mouser Part Number: 584-OP282GSZ; Mouser Price/Stock: https://www.mouser.co.uk/ProductDetail/Analog-Devices/OP282GSZ?qs=WIvQP4zGanhA1FsPCKdzvA%3D%3D
footprint SOIC127P600X175-8N
pins: 1 OUT_A, 2 -IN_A, 3 +IN_A, 4 V-, 5 +IN_B, 6 -IN_B, 7 OUT_B, 8 V+

## P7812-500
designator PS?
Power Supply; Manufacturer_Name: CUI Devices; Manufacturer_Part_Number: P7812-500; Datasheet Link: https://www.cui.com/product/resource/digikeypdf/p78-500.pdf; Height: 18mm; Mouser Part Number: 490-P7812-500; Mouser Price/Stock: https://www.mouser.co.uk/ProductDetail/CUI-Inc/P7812-500?qs=tlsG%2FOw5FFgz85sEtEpyxQ%3D%3D
footprint P7812500
pins: 1 +VIN, 2 GND, 3 +VO

## P7824-500
designator PS?
Power Supply; Manufacturer_Name: CUI Devices; Manufacturer_Part_Number: P7824-500; Datasheet Link: https://www.cui.com/product/resource/digikeypdf/p78-500.pdf; Height: 18mm; Mouser Part Number: 490-P7824-500; Mouser Price/Stock: https://eu.mouser.com/ProductDetail/CUI-Inc/P7824-500?qs=sGAEpiMZZMsc0tfZmXiUnTr9pnMRotOJ1Zj5cWE756mXQl5Bl87AIw%3D%3D
footprint P7812500
pins: 1 +VIN, 2 GND, 3 +VO

## PAD
designator X?  (value not drawn)  (no BOM)
Power Pad; Manufacturer: {Manufacturer}; Reseller3: {Reseller3}; Reseller1: {Reseller1}; Tempcoeff: {Tempcoeff}; Reseller2: {Reseller2}; Tolerance: {Tolerance}; Value: {Value}; PowerVoltage: {PowerVoltage}; CatalogueCode: {CatalogueCode}; Case: {Case}
footprint POWERPAD_ROU_2.4/1.5
footprint POWERPAD_SQ_5/3
footprint POWERPAD_SQ_8/4
footprint pad_test_th_small
footprint PAD_POWER_SQ_6/3
footprint POWERPAD_ROU_2.2/0.9
footprint POWERPAD_ROU_2.2/1.4
footprint POWERPAD_BLADE_H connector
footprint POWERPAD_ROU_2.2/1.0
footprint POWERPAD_ROU_2.2/1.3
footprint PAD_TH_1.4/0.6
footprint POWERPAD_ROU_7/3.2
footprint POWERPAD_4.5mm (H4.5 / OUT9)
footprint POWERPAD_3.5mm (H3.5 / OUT6.5)
pins: 1

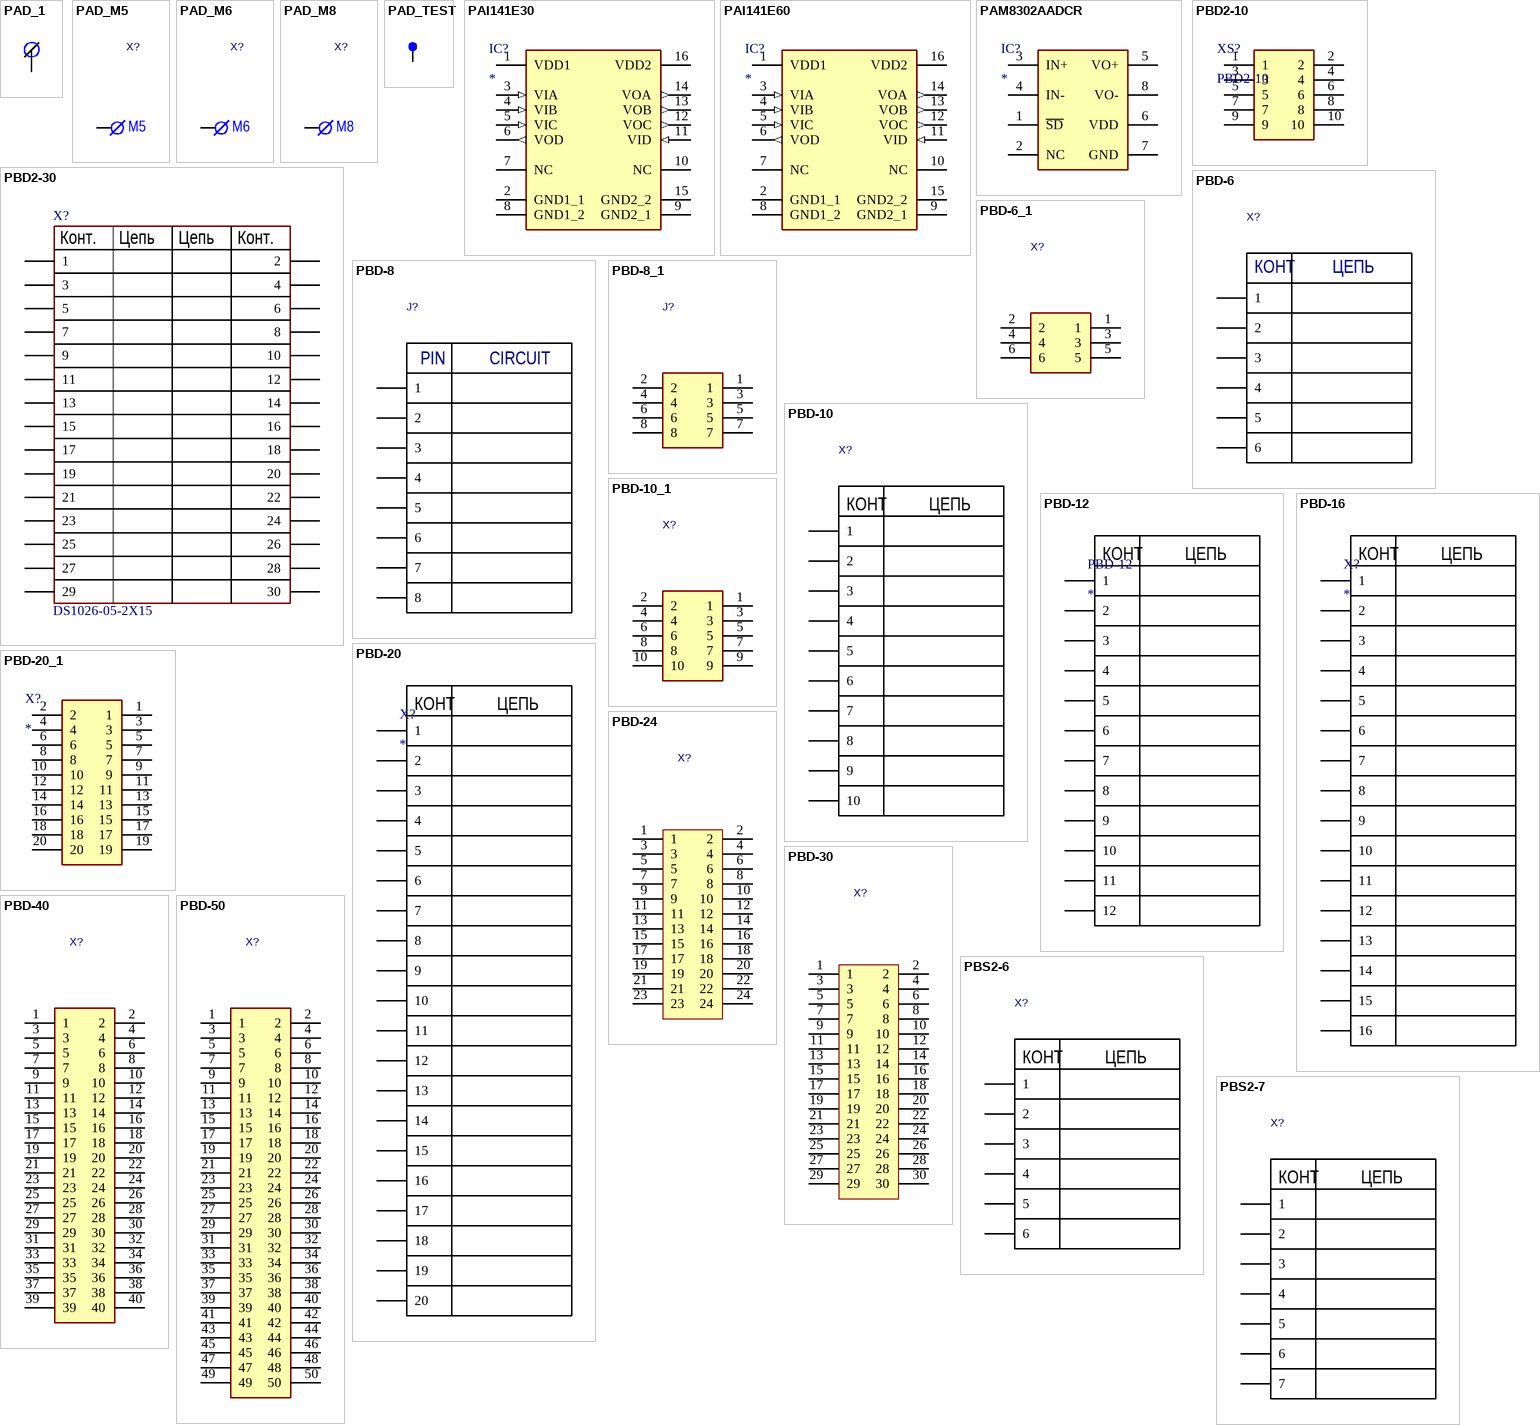
[diagram p29: symbols PAD_1 to PBS2-7]

## PAD_1
designator XT?  (value not drawn)
Value: *
footprint PAD_RECT
pins: 1

## PAD_M5
designator X?, comment PAD  (value not drawn)  (no BOM)
Power Pad; Manufacturer: {Manufacturer}; Reseller3: {Reseller3}; Reseller1: {Reseller1}; Tempcoeff: {Tempcoeff}; Reseller2: {Reseller2}; Tolerance: {Tolerance}; Value: {Value}; PowerVoltage: {PowerVoltage}; CatalogueCode: {CatalogueCode}; Case: {Case}
footprint POWERPAD_M5
pins: 1
text: M5

## PAD_M6
designator X?, comment PAD  (value not drawn)  (no BOM)
Power Pad; Manufacturer: {Manufacturer}; Reseller3: {Reseller3}; Reseller1: {Reseller1}; Tempcoeff: {Tempcoeff}; Reseller2: {Reseller2}; Tolerance: {Tolerance}; Value: {Value}; PowerVoltage: {PowerVoltage}; CatalogueCode: {CatalogueCode}; Case: {Case}
footprint POWERPAD_M6
pins: 1
text: M6

## PAD_M8
designator X?, comment PAD  (value not drawn)  (no BOM)
Power Pad; Manufacturer: {Manufacturer}; Reseller3: {Reseller3}; Reseller1: {Reseller1}; Tempcoeff: {Tempcoeff}; Reseller2: {Reseller2}; Tolerance: {Tolerance}; Value: {Value}; PowerVoltage: {PowerVoltage}; CatalogueCode: {CatalogueCode}; Case: {Case}
footprint POWERPAD_M8
pins: 1
text: M8

## PAD_TEST
designator TP?  (value not drawn)  (no BOM)
Test Point; Manufacturer: {Manufacturer}; Reseller3: {Reseller3}; Reseller1: {Reseller1}; Tempcoeff: {Tempcoeff}; Reseller2: {Reseller2}; Tolerance: {Tolerance}; Value: .NetName; PowerVoltage: {PowerVoltage}; CatalogueCode: {CatalogueCode}; Case: {Case}
footprint PAD_TEST_0.8mm
footprint PAD_TEST_3DPROBE
footprint PAD_TEST_3DPROBE_OUT
footprint PAD_TEST_1.4mm
footprint PAD_TEST_1.0mm
footprint PAD_TEST_2.0mm
footprint PAD_TEST_3.0mm
pins: 1

## PAI141E30
designator IC?
Integrated Circuit, / DGTL ISO 200Mbs 4CH; Manufacturer_Name: 2PAI; Manufacturer_Part_Number: PAI141E30; Datasheet Link: https://www.rpsemi.com/uploads/soft/20230314/2-23031415501G92.pdf; Height: 2.65mm
footprint SOIC127P600X175-16N
pins: 1 VDD1, 2 GND1_1, 3 VIA (in), 4 VIB (in), 5 VIC (in), 6 VOD (out), 7 NC, 8 GND1_2, 9 GND2_1, 10 NC, 11 VID (in), 12 VOC (out), 13 VOB (out), 14 VOA (out), 15 GND2_2, 16 VDD2

## PAI141E60
designator IC?
Integrated Circuit, / DGTL ISO 200Mbs 4CH; Manufacturer_Name: 2PAI; Manufacturer_Part_Number: PAI141E60; Datasheet Link: https://www.rpsemi.com/uploads/soft/20230314/2-23031415501G92.pdf; Height: 2.65mm
footprint SOIC127P1032X265-16N
pins: 1 VDD1, 2 GND1_1, 3 VIA (in), 4 VIB (in), 5 VIC (in), 6 VOD (out), 7 NC, 8 GND1_2, 9 GND2_1, 10 NC, 11 VID (in), 12 VOC (out), 13 VOB (out), 14 VOA (out), 15 GND2_2, 16 VDD2

## PAM8302AADCR
designator IC?
Integrated Circuit; Manufacturer_Name: Diodes Incorporated; Manufacturer_Part_Number: PAM8302AADCR; Datasheet Link: https://www.diodes.com//assets/Datasheets/products_inactive_data/PAM8301.pdf; Height: 1.7mm; Mouser Part Number: 621-PAM8302AADCR; Mouser Price/Stock: https://www.mouser.co.uk/ProductDetail/Diodes-Incorporated/PAM8302AADCR?qs=pYVYkI7xuRUGP4ZWq1B6zQ%3D%3D; Arrow Part Number: PAM8302AADCR; Arrow Price/Stock: null?region=nac
footprint SOIC127P600X170-8N
pins: 1 ~{SD}, 2 NC, 3 IN+, 4 IN-, 5 VO+, 6 VDD, 7 GND, 8 VO-

## PBD2-10
designator XS?
Connector; Manufacturer_Name: Sullins; Manufacturer_Part_Number: NPPN052AFCN-RC; Manufacturer: Connfly; Datasheet Link: https://drawings-pdf.s3.amazonaws.com/10483.pdf; Height: 4.4mm; Part Number: PBD2-10
footprint PBD2-10
pins: 1, 2, 3, 4, 5, 6, 7, 8, 9, 10

## PBD2-30
designator X?, comment DS1026-05-2X15
Connector 2x15 pin 2mm
footprint DS1026-05-2X15
pins: 1, 2, 3, 4, 5, 6, 7, 8, 9, 10, 11, 12, 13, 14, 15, 16, 17, 18, 19, 20, 21, 22, 23, 24, 25, 26, 27, 28, 29, 30
text: Конт.; Цепь

## PBD-6
designator X?  (value not drawn)
Connector; Manufacturer: Connfly; Part Number1: DS-1023 - 2x3; System: Connector; Part Number: PBD-6
footprint PBD-6
pins: 1, 2, 3, 4, 5, 6
text: КОНТ; ЦЕПЬ

## PBD-6_1
designator X?, comment PBD-6  (value not drawn)
Connector; Manufacturer: Connfly; Part Number1: DS-1023 - 2x3; System: Connector; Part Number: PBD-6
footprint PBD-6
pins: 1, 2, 3, 4, 5, 6

## PBD-8
designator J?  (value not drawn)
Connector; Manufacturer: Connfly; Part Number1: DS-1023-2x4; Part Number: PBD-8; System: Connector
footprint PBD-8 (Footprint not found)
footprint PBD-8_SIM800
pins: 1, 2, 3, 4, 5, 6, 7, 8
text: PIN; CIRCUIT

## PBD-8_1
designator J?, comment PBD-8  (value not drawn)
Connector; Manufacturer: Connfly; Part Number1: DS-1023-2x4; Part Number: PBD-8; System: Connector
footprint PBD-8
pins: 1, 2, 3, 4, 5, 6, 7, 8

## PBD-10
designator X?  (value not drawn)
Connector; Manufacturer: Connfly; Part Number1: DS-1023-2x5; Part Number: PBD-10; System: Connector
footprint PBD-10 (Footprint not found)
pins: 1, 2, 3, 4, 5, 6, 7, 8, 9, 10
text: КОНТ; ЦЕПЬ

## PBD-10_1
designator X?, comment PBD-10  (value not drawn)
Connector; Manufacturer: Connfly; Part Number1: DS-1023-2x5; Part Number: PBD-10; System: Connector
footprint PBD-10 (Footprint not found)
pins: 1, 2, 3, 4, 5, 6, 7, 8, 9, 10

## PBD-12
designator PBD-12
Connector; Manufacturer: Connfly; Part Number1: DS1023-2x6; Part Number: PBD-16; Height: 8.5mm; System: Connector
footprint PBD-12
pins: 1, 2, 3, 4, 5, 6, 7, 8, 9, 10, 11, 12
text: КОНТ; ЦЕПЬ

## PBD-16
designator X?
Connector; Manufacturer: Connfly; Part Number1: DS1023-2x8; Part Number: PBD-16; Height: 8.5mm; System: Connector
footprint RHDR16W60P254_2X8_2082X500X850P
pins: 1, 2, 3, 4, 5, 6, 7, 8, 9, 10, 11, 12, 13, 14, 15, 16
text: КОНТ; ЦЕПЬ

## PBD-20
designator X?
Connector; Manufacturer: Connfly; Part Number: PBD-20; Part Number1: DS1023-2*10; Height: 8.5mm; System: Connector
footprint PBD-20
pins: 1, 2, 3, 4, 5, 6, 7, 8, 9, 10, 11, 12, 13, 14, 15, 16, 17, 18, 19, 20
text: КОНТ; ЦЕПЬ

## PBD-20_1
designator X?
Connector; Manufacturer: Connfly; Part Number: PBD-20; Part Number1: DS1023-2*10; Height: 8.5mm; System: Connector
footprint PBD-20
pins: 1, 2, 3, 4, 5, 6, 7, 8, 9, 10, 11, 12, 13, 14, 15, 16, 17, 18, 19, 20

## PBD-24
designator X?  (value not drawn)
Connector; Manufacturer: Connfly; Part Number: PBD-30; Part Number1: DS-1023-2x12; System: Connector
footprint PBD-24 (Footprint not found)
pins: 1, 2, 3, 4, 5, 6, 7, 8, 9, 10, 11, 12, 13, 14, 15, 16, 17, 18, 19, 20, 21, 22, 23, 24

## PBD-30
designator X?  (value not drawn)
Connector; Manufacturer: Connfly; Part Number1: DS-1023-2x15; System: Connector; Part Number: PBD-30
footprint PBD-30
pins: 1, 2, 3, 4, 5, 6, 7, 8, 9, 10, 11, 12, 13, 14, 15, 16, 17, 18, 19, 20, 21, 22, 23, 24, 25, 26, 27, 28, 29, 30

## PBD-40
designator X?  (value not drawn)
Connector; Manufacturer: Connfly; Part Number1: DS-1023-2x20; System: Connector; Part Number: PBD-40
footprint PBD-40 (Footprint not found)
pins: 1, 2, 3, 4, 5, 6, 7, 8, 9, 10, 11, 12, 13, 14, 15, 16, 17, 18, 19, 20, 21, 22, 23, 24, 25, 26, 27, 28, 29, 30, 31, 32, 33, 34, 35, 36, 37, 38, 39, 40

## PBD-50
designator X?  (value not drawn)
Connector; Manufacturer: Connfly; Part Number: PBD-40; Part Number1: DS-1023-2x20; System: Connector
footprint PBD-50 (Footprint not found)
pins: 1, 2, 3, 4, 5, 6, 7, 8, 9, 10, 11, 12, 13, 14, 15, 16, 17, 18, 19, 20, 21, 22, 23, 24, 25, 26, 27, 28, 29, 30, 31, 32, 33, 34, 35, 36, 37, 38, 39, 40, 41, 42, 43, 44, 45, 46, 47, 48, 49, 50

## PBS2-6
designator X?  (value not drawn)
Connector, Header, Pitch 2mm, H=4.3mm; Manufacturer: Connfly; Part Number1: DS-1026-01x6; Part Number: PBS2-6; System: Connector
footprint PBS2-6
pins: 1, 2, 3, 4, 5, 6
text: КОНТ; ЦЕПЬ

## PBS2-7
designator X?  (value not drawn)
Connector, Header, Pitch 2mm, H=4.3mm; Manufacturer: Connfly; Part Number1: DS-1026-01x7; Part Number: PBS2-7; System: Connector
footprint PBS2-7 (Footprint not found)
pins: 1, 2, 3, 4, 5, 6, 7
text: КОНТ; ЦЕПЬ

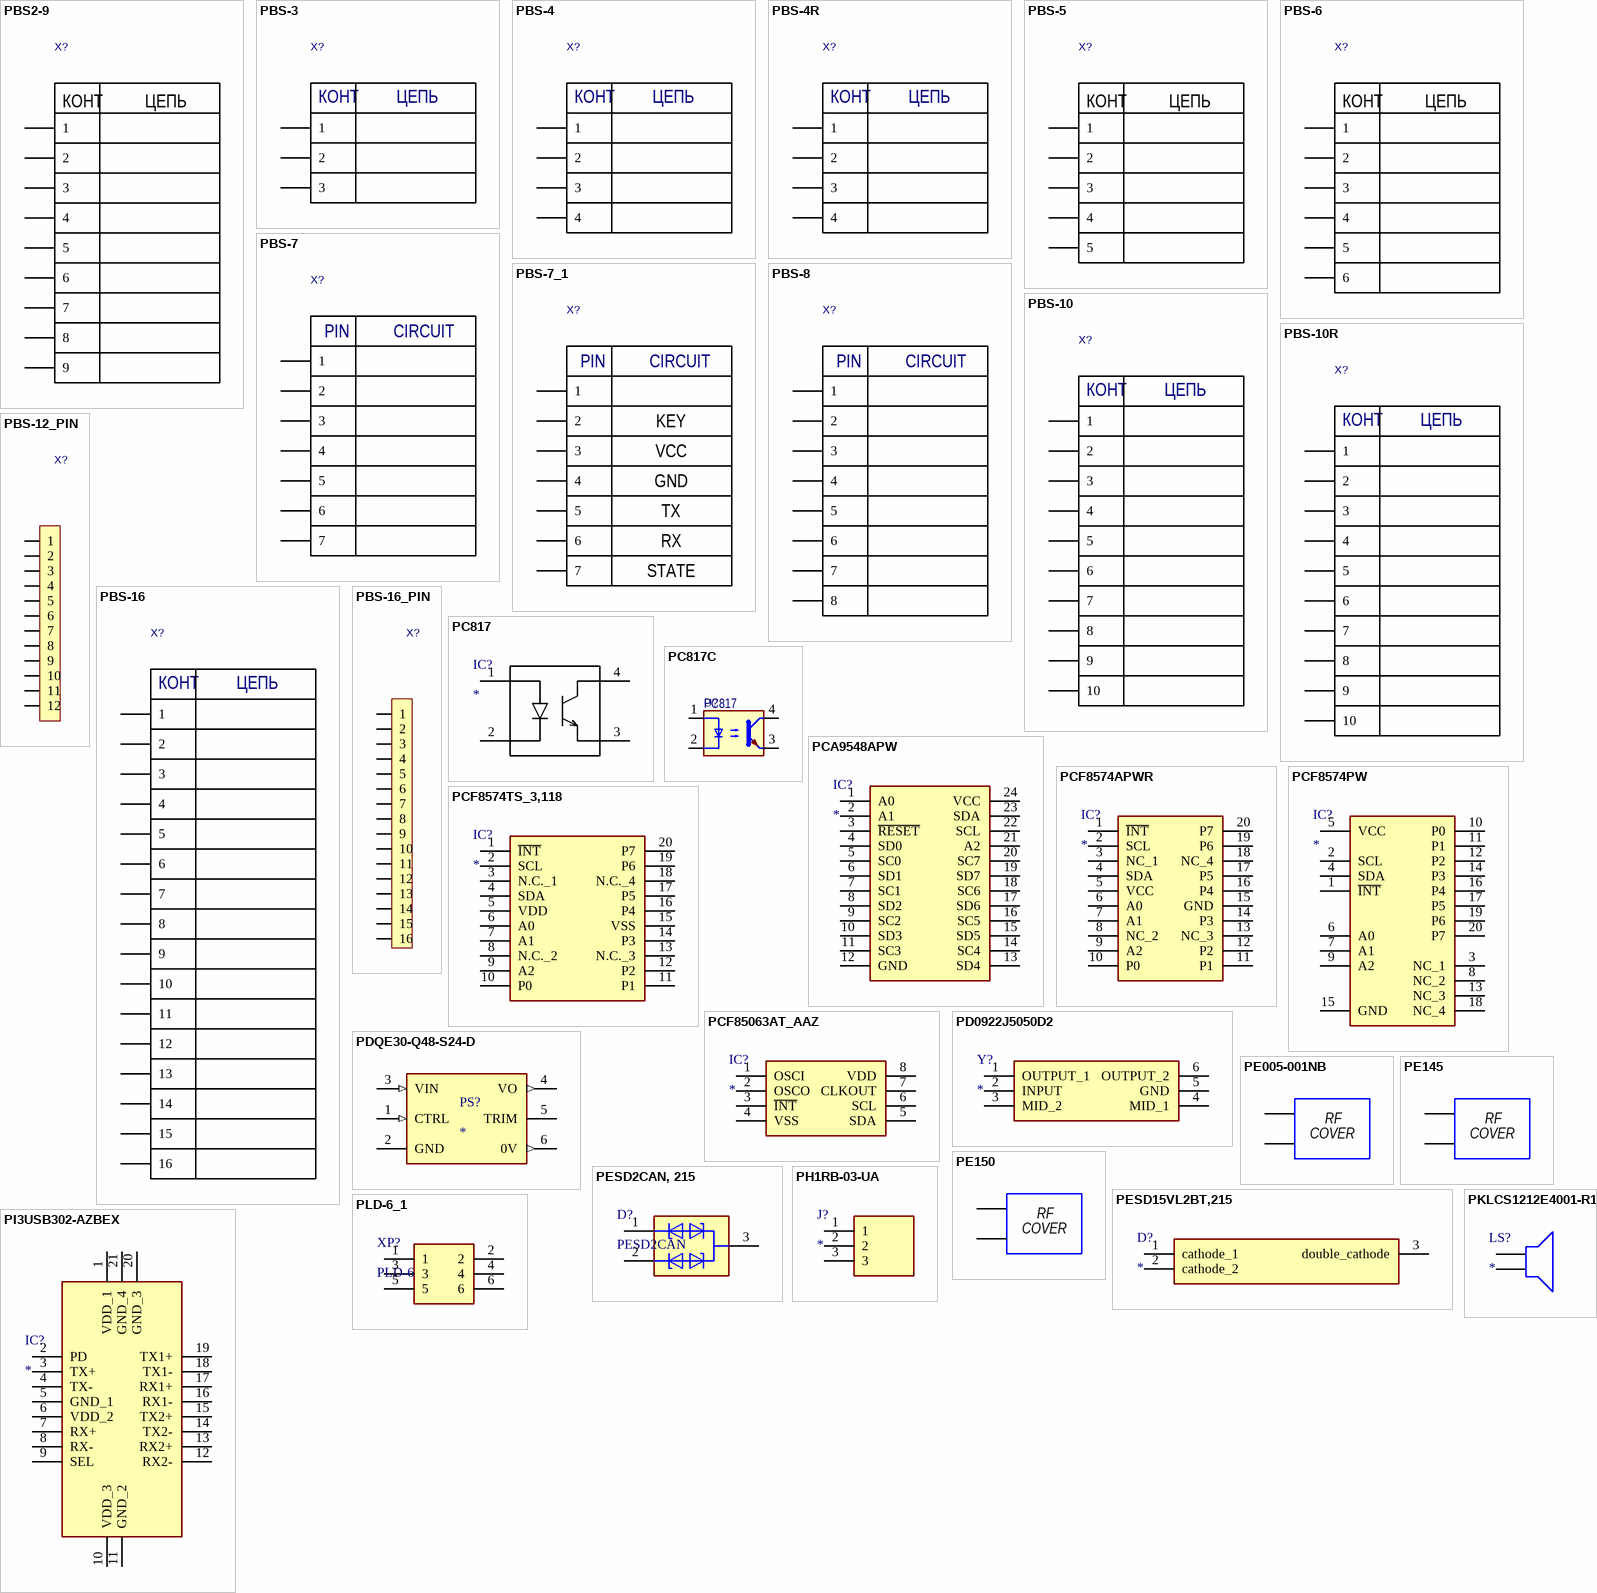
[diagram p30: symbols PBS2-9 to PLD-6_1]

## PBS2-9
designator X?  (value not drawn)
Connector, Header, Pitch 2mm, H=4.3mm; Manufacturer: Connfly; Part Number1: DS-1026-01x9; Part Number: PBS2-9; System: Connector
footprint PBS2-9 (Footprint not found)
pins: 1, 2, 3, 4, 5, 6, 7, 8, 9
text: КОНТ; ЦЕПЬ

## PBS-3
designator X?  (value not drawn)
Connector; Manufacturer: Connfly; Part Number1: DS-1023-1x3; System: Connector; Part Number: PBS-3
footprint PBS-3 (Footprint not found)
pins: 1, 2, 3
text: КОНТ; ЦЕПЬ

## PBS-4
designator X?  (value not drawn)
Connector; Manufacturer: Connfly; Part Number1: DS-1023-1x4; System: Connector; Part Number: PBS-4
footprint PBS-4
pins: 1, 2, 3, 4
text: КОНТ; ЦЕПЬ

## PBS-4R
designator X?  (value not drawn)
Connector; Manufacturer: Connfly; Part Number: PBS-4; Part Number1: DS-1023-1x4; System: Connector
footprint PBS-4R
pins: 1, 2, 3, 4
text: КОНТ; ЦЕПЬ

## PBS-5
designator X?  (value not drawn)
Connector; Manufacturer: Connfly; Part Number: PBD-5; Part Number1: DS-1023-1x5; System: Connector
footprint PBS-5
pins: 1, 2, 3, 4, 5
text: КОНТ; ЦЕПЬ

## PBS-6
designator X?  (value not drawn)
Connector; Manufacturer: Connfly; Part Number: PBD-6; Part Number1: DS-1023-1x6; System: Connector
footprint PBS-6
pins: 1, 2, 3, 4, 5, 6
text: КОНТ; ЦЕПЬ

## PBS-7
designator X?  (value not drawn)
Connector; Manufacturer: Connfly; Part Number: PBD-7; Part Number1: DS-1023-1x7; System: Connector
footprint PBS-7 (Footprint not found)
pins: 1, 2, 3, 4, 5, 6, 7
text: PIN; CIRCUIT

## PBS-7_1
designator X?, comment PBS-7  (value not drawn)
Connector; Manufacturer: Connfly; Part Number: PBS-7 + HC-06 BT Module; Part Number1: DS-1023-1x7; System: Connector
footprint PBS-7+HC-06 Module
pins: 1, 2, 3, 4, 5, 6, 7
text: PIN; CIRCUIT; KEY; VCC; GND; TX; RX; STATE

## PBS-8
designator X?  (value not drawn)
Connector; Manufacturer: Connfly; Part Number: PBD-8; Part Number1: DS-1023-1x8; System: Connector
footprint PBS-8
pins: 1, 2, 3, 4, 5, 6, 7, 8
text: PIN; CIRCUIT

## PBS-10
designator X?  (value not drawn)
Connector; Manufacturer: Connfly; Part Number1: DS-1023-1x10; System: Connector; Part Number: PBS-10
footprint PBS-10
footprint PBS-10_MPU9250
pins: 1, 2, 3, 4, 5, 6, 7, 8, 9, 10
text: КОНТ; ЦЕПЬ

## PBS-10R
designator X?  (value not drawn)
Connector; Manufacturer: Connfly; Part Number1: DS-1024-1x10R; System: Connector; Part Number: PBS-10R
footprint PBS-10R
pins: 1, 2, 3, 4, 5, 6, 7, 8, 9, 10
text: КОНТ; ЦЕПЬ

## PBS-12_PIN
designator X?, comment PBS-12  (value not drawn)
Connector; Manufacturer: Connfly; Part Number1: DS-1023-1x12; System: Connector; Part Number: PBS-12
footprint PBS-12 (Footprint not found)
pins: 1, 2, 3, 4, 5, 6, 7, 8, 9, 10, 11, 12

## PBS-16
designator X?  (value not drawn)
Connector; Manufacturer: Connfly; Part Number1: DS-1023-1x16; System: Connector; Part Number: PBS-16
footprint PBS-16
pins: 1, 2, 3, 4, 5, 6, 7, 8, 9, 10, 11, 12, 13, 14, 15, 16
text: КОНТ; ЦЕПЬ

## PBS-16_PIN
designator X?, comment PBS-16  (value not drawn)
Connector; Manufacturer: Connfly; Part Number1: DS-1023-1x16; System: Connector; Part Number: PBS-16
footprint PBS-16
pins: 1, 2, 3, 4, 5, 6, 7, 8, 9, 10, 11, 12, 13, 14, 15, 16

## PC817
designator IC?
Integrated Circuit; Manufacturer_Name: Sharp Microelectronics; Manufacturer_Part_Number: PC817X2NSZ0F; Datasheet Link: https://datasheet.datasheetarchive.com/originals/distributors/Datasheets_SAMA/458e45842a103a05998fcebbd6f7366e.pdf; Height: 4mm; Mouser Part Number: N/A; Mouser Price/Stock: https://www.mouser.co.uk/ProductDetail/Sharp-Microelectronics/PC817X2NSZ0F?qs=6kT3pPPHxnU7uYWM8Yy85A%3D%3D
footprint DIP762W60P254L458H400Q4N
pins: 1 ANODE, 2 CATHODE, 3 EMITTER, 4 COLLECTOR

## PC817C
designator U?, comment value PC817  (hidden comment: PC817 (SMD-4))
OPTOISOLATOR 5KV 1CH TRANS 4-SMD
footprint SOP254P1016X460-4N
pins: 1, 2, 3, 4

## PCA9548APW
designator IC?
Integrated Circuit; Manufacturer_Name: Texas Instruments; Manufacturer_Part_Number: PCA9548APW; Datasheet Link: http://www.ti.com/lit/ds/symlink/pca9548a.pdf; Height: 1.2mm; Mouser Part Number: 595-PCA9548APW; Mouser Price/Stock: https://www.mouser.co.uk/ProductDetail/Texas-Instruments/PCA9548APW?qs=iSMark9AYDUcRAvPZkZvig%3D%3D; Arrow Part Number: PCA9548APW; Arrow Price/Stock: https://www.arrow.com/en/products/pca9548apw/texas-instruments?region=nac
footprint SOP65P640X120-24N
pins: 1 A0, 2 A1, 3 ~{RESET}, 4 SD0, 5 SC0, 6 SD1, 7 SC1, 8 SD2, 9 SC2, 10 SD3, 11 SC3, 12 GND, 13 SD4, 14 SC4, 15 SD5, 16 SC5, 17 SD6, 18 SC6, 19 SD7, 20 SC7, 21 A2, 22 SCL, 23 SDA, 24 VCC

## PCF8574APWR
designator IC?
Integrated Circuit; Manufacturer_Name: Texas Instruments; Manufacturer_Part_Number: PCF8574APWR; Datasheet Link: http://www.ti.com/lit/ds/symlink/pcf8574a.pdf; Height: 1.2mm; Mouser Part Number: 595-PCF8574APWR; Mouser Price/Stock: https://www.mouser.co.uk/ProductDetail/Texas-Instruments/PCF8574APWR?qs=bkMXpVdiF42gbWVI8U3xeA%3D%3D; Arrow Part Number: PCF8574APWR; Arrow Price/Stock: https://www.arrow.com/en/products/pcf8574apwr/texas-instruments?utm_currency=USD&region=nac
footprint SOP65P640X120-20N
pins: 1 ~{INT}, 2 SCL, 3 NC_1, 4 SDA, 5 VCC, 6 A0, 7 A1, 8 NC_2, 9 A2, 10 P0, 11 P1, 12 P2, 13 NC_3, 14 P3, 15 GND, 16 P4, 17 P5, 18 NC_4, 19 P6, 20 P7

## PCF8574PW
designator IC?
Integrated Circuit; Manufacturer_Name: Texas Instruments; Manufacturer_Part_Number: PCF8574PW; Datasheet Link: https://www.ti.com/lit/ds/symlink/pcf8574.pdf?ts=1599897350462&ref_url=https%253A%252F%252Fwww.ti.com%252Fstore%252Fti%252Fen%252Fp%252Fproduct%252F%253Fp%253DPCF8574PW%2526keyMatch%253DPCF8574PW%2526tisearch%253DSearch-EN-everything%2526usecase%253DOPN; Height: 1.2mm; Mouser Part Number: 595-PCF8574PW; Mouser Price/Stock: https://www.mouser.co.uk/ProductDetail/Texas-Instruments/PCF8574PW?qs=wgAEGBTxy7nGas5ljMOEVg%3D%3D; Arrow Part Number: PCF8574PW; Arrow Price/Stock: https://www.arrow.com/en/products/pcf8574pw/texas-instruments?region=nac
footprint SOP65P640X120-20N
pins: 1 ~{INT}, 2 SCL, 3 NC_1, 4 SDA, 5 VCC, 6 A0, 7 A1, 8 NC_2, 9 A2, 10 P0, 11 P1, 12 P2, 13 NC_3, 14 P3, 15 GND, 16 P4, 17 P5, 18 NC_4, 19 P6, 20 P7

## PCF8574TS_3,118
designator IC?
Integrated Circuit; Manufacturer_Name: NXP; Manufacturer_Part_Number: PCF8574TS/3,118; Datasheet Link: http://www.nxp.com/docs/en/data-sheet/PCF8574_PCF8574A.pdf; Height: 1.5mm; Mouser Part Number: 771-PCF8574TDK-T; Mouser Price/Stock: https://www.mouser.co.uk/ProductDetail/NXP-Semiconductors/PCF8574TS-3118?qs=LOCUfHb8d9s6DQR34Mm8kg%3D%3D; Arrow Part Number: PCF8574TS/3,118; Arrow Price/Stock: https://www.arrow.com/en/products/pcf8574ts3118/nxp-semiconductors?region=nac
footprint SOP65P640X150-20N
pins: 1 ~{INT}, 2 SCL, 3 N.C._1, 4 SDA, 5 VDD, 6 A0, 7 A1, 8 N.C._2, 9 A2, 10 P0, 11 P1, 12 P2, 13 N.C._3, 14 P3, 15 VSS, 16 P4, 17 P5, 18 N.C._4, 19 P6, 20 P7

## PCF85063AT_AAZ
designator IC?
Integrated Circuit; Manufacturer_Name: NXP; Manufacturer_Part_Number: PCF85063AT/AAZ; Datasheet Link: http://www.nxp.com/docs/en/data-sheet/PCF85063A.pdf; Height: 1.75mm; Mouser Part Number: 771-PCF85063AT/AAZ; Mouser Price/Stock: https://www.mouser.co.uk/ProductDetail/NXP-Semiconductors/PCF85063AT-AAZ?qs=sV%252BQJnSpgu9E5WpV9lmUdg%3D%3D; Arrow Part Number: PCF85063AT/AAZ; Arrow Price/Stock: https://www.arrow.com/en/products/pcf85063ataaz/nxp-semiconductors?region=nac
footprint SOIC127P600X175-8N
pins: 1 OSCI, 2 OSCO, 3 ~{INT}, 4 VSS, 5 SDA, 6 SCL, 7 CLKOUT, 8 VDD

## PD0922J5050D2
designator Y?
Crystal or Oscillator; Manufacturer_Name: XINGER; Manufacturer_Part_Number: PD0922J5050D2; Datasheet Link: https://www.kynix.com/uploadfiles/pdf8798/PD0922J5050D2.pdf; Height: 0.93mm
footprint PD0922J5050D2
pins: 1 OUTPUT_1, 2 INPUT, 3 MID_2, 4 MID_1, 5 GND, 6 OUTPUT_2

## PDQE30-Q48-S24-D
designator PS?
30 W, 4:1 Input Range, Single Regulated Output, DIP, 1500 Vdc Isolation, Dc-Dc Converter; MP: PDQE30-Q48-S24-D; MF: CUI Inc.; Value: *; Availability: Unavailable; Package: DIP-6; Check_prices: https://www.snapeda.com/parts/PDQE30-Q48-S24-D/CUI/view-part/?ref=eda; SnapEDA_Link: https://www.snapeda.com/parts/PDQE30-Q48-S24-D/CUI/view-part/?ref=snap; Price: None
footprint PDQE30
pins: 1 CTRL (in), 2 GND (power), 3 VIN (in), 4 VO (out), 5 TRIM, 6 0V (out)

## PE005-001NB
designator XT?  (value not drawn)
RF COVER, PE005-001NB; Value: *
footprint PE005-001 (Footprint not found)
pins: 1, 2
text: RF; COVER

## PE145
designator XT?, comment PE145 RF COVER  (value not drawn)
RF COVER, PE145; Value: *
footprint PE145 (Footprint not found)
pins: 1, 2
text: RF; COVER

## PE150
designator XT?, comment PE150 RF COVER  (value not drawn)
RF COVER, PE150; Value: *
footprint PE150 (Footprint not found)
pins: 1, 2
text: RF; COVER

## PESD2CAN, 215
designator D?, comment PESD2CAN
Diode ESD (Uni-directional); Manufacturer_Name: Nexperia; Manufacturer_Part_Number: PESD2CAN24T-QR; Datasheet Link: https://assets.nexperia.com/documents/data-sheet/PESD2CAN.pdf; Height: 1.1mm
footprint SOT95P230X110-3N
pins: 1 CAT_1, 2 CAT_2, 3 COM

## PESD15VL2BT,215
designator D?
Diode; Manufacturer_Name: Nexperia; Manufacturer_Part_Number: PESD15VL2BT,215; Datasheet Link: https://assets.nexperia.com/documents/data-sheet/PESDXL2BT_SER.pdf; Height: 1.1mm; Mouser Part Number: 771-PESD15VL2BT-T/R; Mouser Price/Stock: https://www.mouser.co.uk/ProductDetail/Nexperia/PESD15VL2BT215?qs=LOCUfHb8d9vyDy2ag0hbbA%3D%3D; Arrow Part Number: PESD15VL2BT,215; Arrow Price/Stock: https://www.arrow.com/en/products/pesd15vl2bt215/nexperia?region=nac
footprint SOT95P230X110-3N
pins: 1 cathode_1, 2 cathode_2, 3 double_cathode

## PH1RB-03-UA
designator J?
Connector; Manufacturer_Name: Adam Tech; Manufacturer_Part_Number: PH1RB-03-UA; Datasheet Link: https://app.adam-tech.com/products/download/data_sheet/201281/ph1rb-xx-ua-data-sheet.pdf; Height: 3.008mm; Mouser Part Number: 737-PH1RB-03-UA; Mouser Price/Stock: https://www.mouser.co.uk/ProductDetail/Adam-Tech/PH1RB-03-UA?qs=HoCaDK9Nz5dMpkzb4k6qpA%3D%3D; Arrow Part Number: PH1RB-03-UA; Arrow Price/Stock: https://www.arrow.com/en/products/ph1rb-03-ua/adam-tech?utm_currency=USD&region=nac
footprint HDRRA3W64P0X254_1X3_762X250X301P
pins: 1, 2, 3

## PI3USB302-AZBEX
designator IC?
Integrated Circuit; Manufacturer_Name: Diodes Incorporated; Manufacturer_Part_Number: PI3USB302-AZBEX; Datasheet Link: https://www.diodes.com//assets/Datasheets/PI3USB302-A.pdf; Height: 1mm; Mouser Part Number: 729-PI3USB302-AZBEX; Mouser Price/Stock: https://www.mouser.co.uk/ProductDetail/Diodes-Incorporated/PI3USB302-AZBEX?qs=RX7uCqH05oaFctr44Vdm4w%3D%3D; Arrow Part Number: PI3USB302-AZBEX; Arrow Price/Stock: https://www.arrow.com/en/products/pi3usb302-azbex/diodes-incorporated?utm_currency=USD&region=nac
footprint PI3USB302AZBEX
pins: 1 VDD_1, 2 PD, 3 TX+, 4 TX-, 5 GND_1, 6 VDD_2, 7 RX+, 8 RX-, 9 SEL, 10 VDD_3, 11 GND_2, 12 RX2-, 13 RX2+, 14 TX2-, 15 TX2+, 16 RX1-, 17 RX1+, 18 TX1-, 19 TX1+, 20 GND_3, 21 GND_4

## PKLCS1212E4001-R1
designator LS?
Loudspeaker or Buzzer; Manufacturer_Name: Murata Electronics; Manufacturer_Part_Number: PKLCS1212E4001-R1; Datasheet Link: https://componentsearchengine.com/Datasheets/2/PKLCS1212E4001-R1.pdf; Mouser Part Number: 81-PKLCS1212E4001; Mouser Price/Stock: https://www.mouser.co.uk/ProductDetail/Murata-Electronics/PKLCS1212E4001-R1?qs=obr%252BoSDNKM%252Btd7GB2KoUgw%3D%3D; Arrow Part Number: PKLCS1212E4001-R1; Arrow Price/Stock: https://www.arrow.com/en/products/pklcs1212e4001-r1/murata-manufacturing?region=europe
footprint PKLCS1212E4001
pins: 1, 2

## PLD-6_1
designator XP?, comment PLD-6
Connector
footprint PLD-6
pins: 1, 2, 3, 4, 5, 6

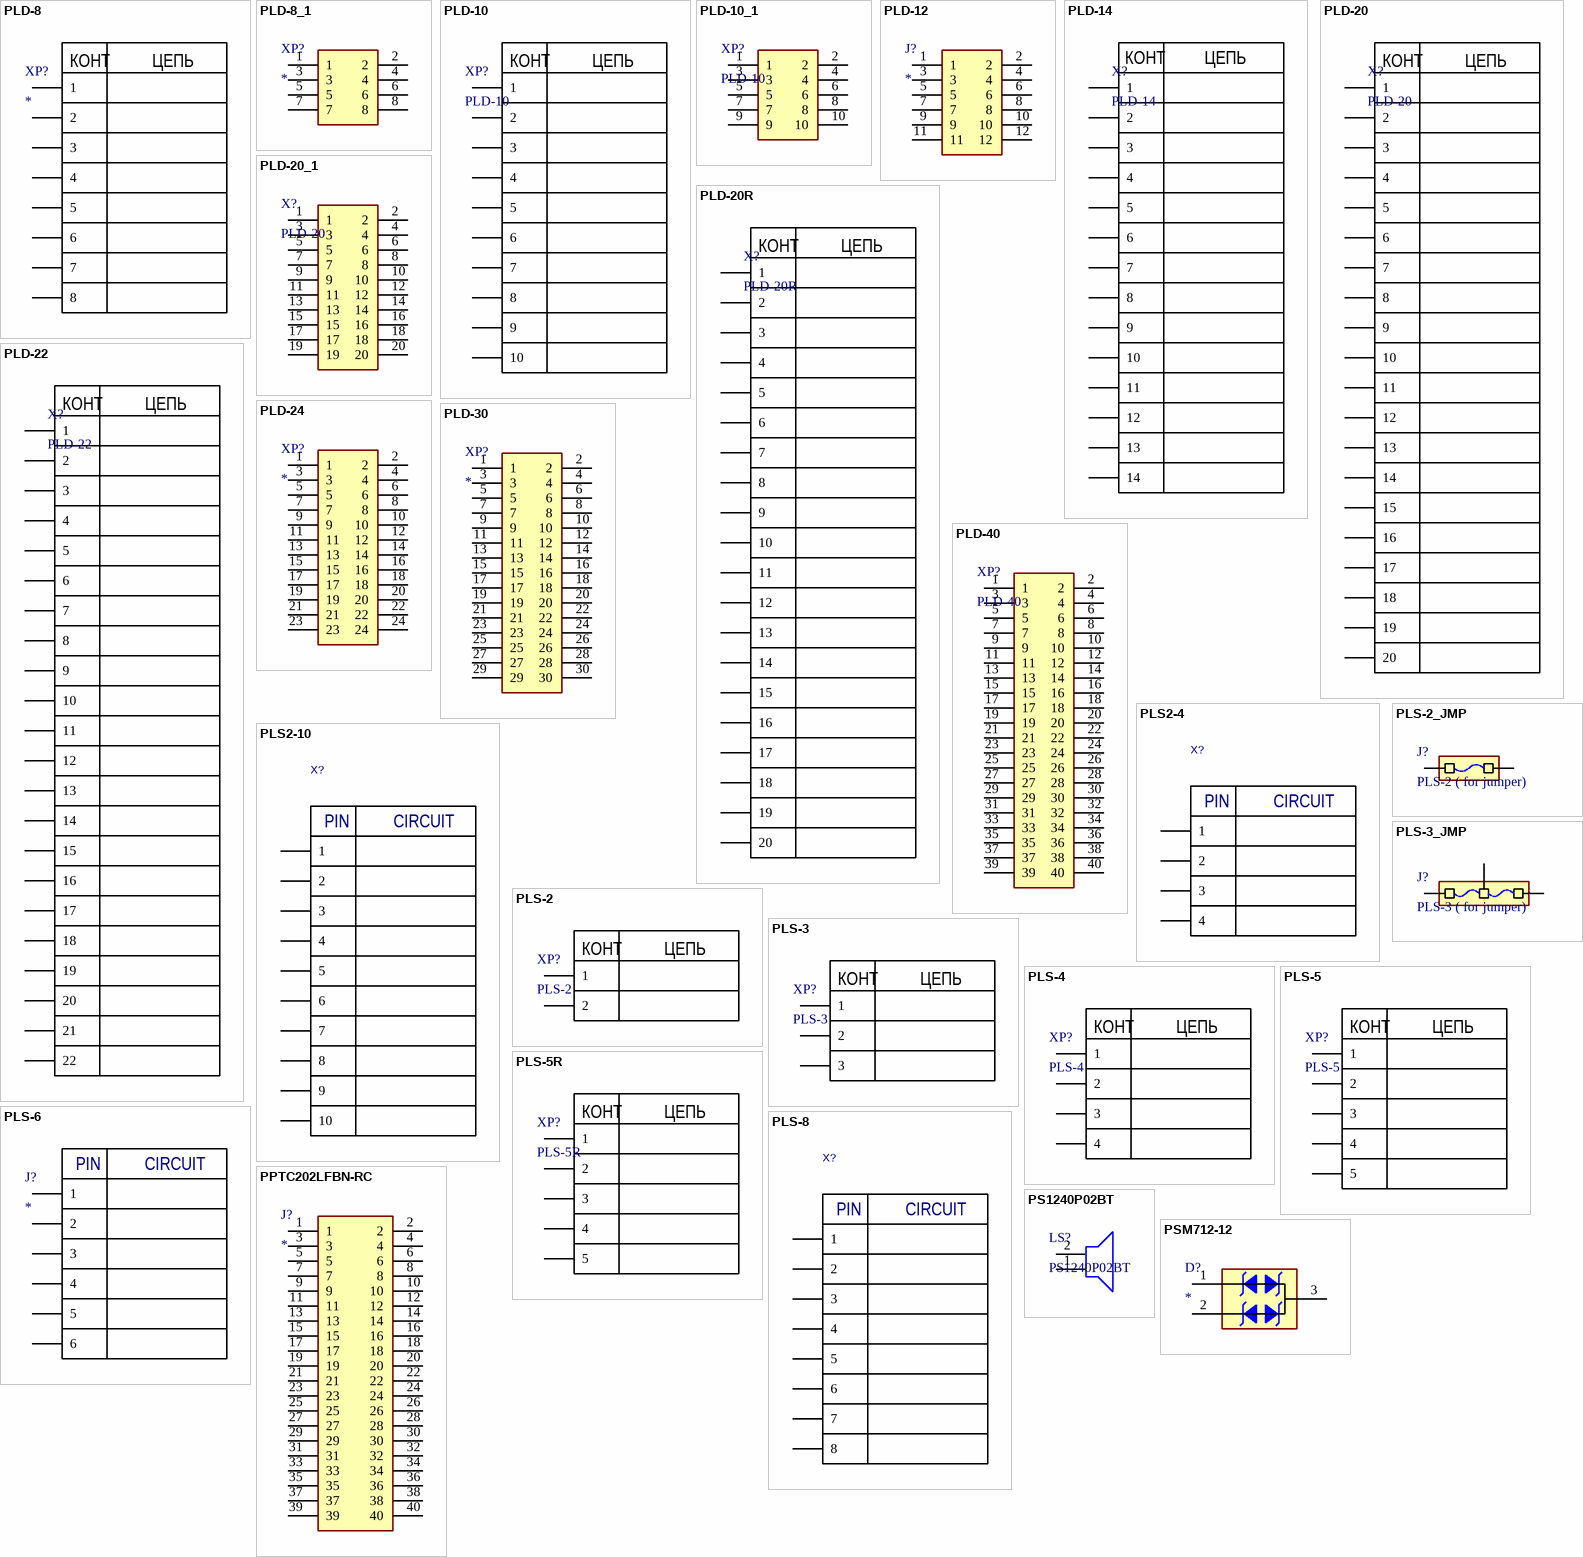
[diagram p31: symbols PLD-8 to PSM712-12]

## PLD-8
designator XP?
Connector; Manufacturer_Name: JST (JAPAN SOLDERLESS TERMINALS); Manufacturer_Part_Number: S4B-PH-SM4-TB(LF)(SN); Datasheet Link: http://uk.rs-online.com/web/p/products/6881366; Arrow Part Number: S4B-PH-SM4-TB(LF)(SN); Arrow Price/Stock: https://www.arrow.com/en/products/s4b-ph-sm4-tb-lf-sn/jst-manufacturing; System: Connector
footprint PLD-8
pins: 1, 2, 3, 4, 5, 6, 7, 8
text: КОНТ; ЦЕПЬ

## PLD-8_1
designator XP?
Connector; Manufacturer_Name: JST (JAPAN SOLDERLESS TERMINALS); Manufacturer_Part_Number: S4B-PH-SM4-TB(LF)(SN); Datasheet Link: http://uk.rs-online.com/web/p/products/6881366; Arrow Part Number: S4B-PH-SM4-TB(LF)(SN); Arrow Price/Stock: https://www.arrow.com/en/products/s4b-ph-sm4-tb-lf-sn/jst-manufacturing; System: Connector
footprint PLD-8
pins: 1, 2, 3, 4, 5, 6, 7, 8

## PLD-10
designator XP?
Connector; Manufacturer_Name: JST (JAPAN SOLDERLESS TERMINALS); Datasheet Link: http://uk.rs-online.com/web/p/products/6881366; Manufacturer_Part_Number: PLD-10; Arrow Part Number: S4B-PH-SM4-TB(LF)(SN); Arrow Price/Stock: https://www.arrow.com/en/products/s4b-ph-sm4-tb-lf-sn/jst-manufacturing; System: Connector
footprint PLD-10
pins: 1, 2, 3, 4, 5, 6, 7, 8, 9, 10
text: КОНТ; ЦЕПЬ

## PLD-10_1
designator XP?, comment PLD-10
Connector; Manufacturer_Name: JST (JAPAN SOLDERLESS TERMINALS); Datasheet Link: http://uk.rs-online.com/web/p/products/6881366; Manufacturer_Part_Number: PLD-10; Arrow Part Number: S4B-PH-SM4-TB(LF)(SN); Arrow Price/Stock: https://www.arrow.com/en/products/s4b-ph-sm4-tb-lf-sn/jst-manufacturing; System: Connector
footprint PLD-10
pins: 1, 2, 3, 4, 5, 6, 7, 8, 9, 10

## PLD-12
designator J?
Connector; Manufacturer_Name: JST (JAPAN SOLDERLESS TERMINALS); Manufacturer_Part_Number: S4B-PH-SM4-TB(LF)(SN); Datasheet Link: http://uk.rs-online.com/web/p/products/6881366; Arrow Part Number: S4B-PH-SM4-TB(LF)(SN); Arrow Price/Stock: https://www.arrow.com/en/products/s4b-ph-sm4-tb-lf-sn/jst-manufacturing
footprint PLD-12
pins: 1, 2, 3, 4, 5, 6, 7, 8, 9, 10, 11, 12

## PLD-14
designator X?
Connector; Manufacturer: Connfly; Part Number1: DS1021-2x7; Height: 8.5mm; System: Connector; Part Number: PLD-14
footprint PLD-14 (Footprint not found)
pins: 1, 2, 3, 4, 5, 6, 7, 8, 9, 10, 11, 12, 13, 14
text: КОНТ; ЦЕПЬ

## PLD-20
designator X?
Connector; Manufacturer: Connfly; Part Number1: DS1021-2*10; Height: 8.5mm; Part Number: PLD-20; System: Connector
footprint PLD-20
pins: 1, 2, 3, 4, 5, 6, 7, 8, 9, 10, 11, 12, 13, 14, 15, 16, 17, 18, 19, 20
text: КОНТ; ЦЕПЬ